# Altium integrated library StudentsLibrary.IntLib: 806 symbols (part 6 of 10)
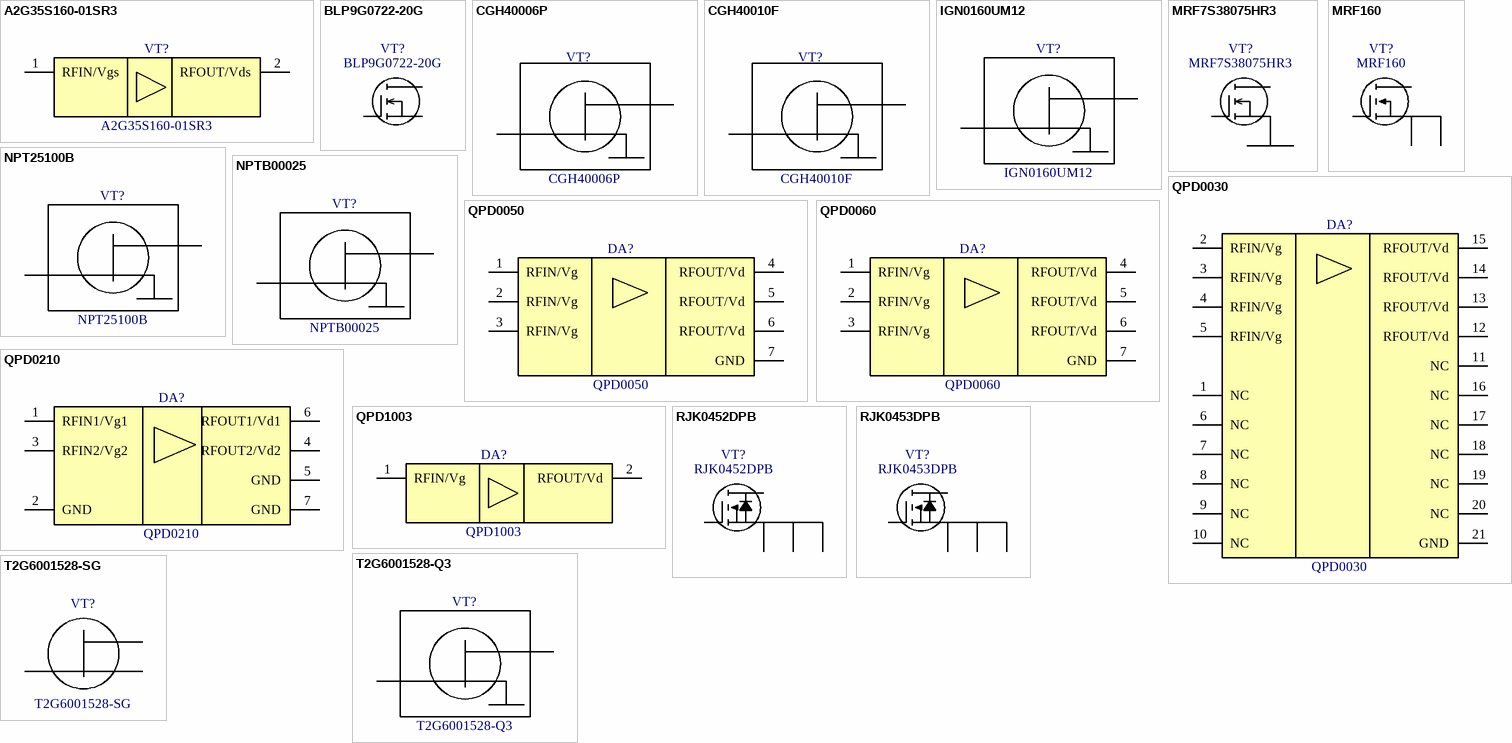
[diagram p52: symbols A2G35S160-01SR3 to T2G6001528-SG]

## MRF160
designator VT?
Broadband Power FET4W, to 500MHz, 28V; Manufacturer: MACOM; PartNumber: MRF160; ComponentLink1Description: Product Page; ComponentLink1URL: https://www.macom.com/products/product-detail/MRF160; ComponentLink2Description: DataSheet; ComponentLink2URL: https://cdn.macom.com/datasheets/MRF160.pdf
footprint MRF160 (MACOM Power FET CASE 249-06)
pins: 1 S, 2 G, 3 S, 4 D

## NPT25100B
designator VT?
GaN Amplifier 28 V, 125 W, 2.1 - 2.7 GHz; Manufacturer: MACOM; PartNumber: NPT25100B; ComponentLink1Description: Product Page; ComponentLink2Description: DataSheet; ComponentLink1URL: https://www.macom.com/products/product-detail/NPT25100B; ComponentLink2URL: https://cdn.macom.com/datasheets/NPT25100.pdf
footprint NPT25100B (MACOM Flange Ceramic)
pins: D, G

## NPTB00025
designator VT?
GaN Power Transistor, 28 V, 25 W DC - 4 GHz; Manufacturer: MACOM; PartNumber: NPTB00025; ComponentLink1Description: Product Page; ComponentLink2Description: DataSheet; ComponentLink1URL: https://www.macom.com/products/product-detail/NPTB00025B; ComponentLink2URL: https://cdn.macom.com/datasheets/NPTB00025.pdf
footprint NPTB00025 (M/A-COM NPTB00025 case AC200B-2)
pins: D, G

## QPD0030
designator DA?
45 W, 48 V, DC – 4 GHz, GaN RF Power Transistor; Manufacturer: Qorvo; PartNumber: QPD0030; ComponentLink1Description: Product Page; ComponentLink1URL: https://www.qorvo.com/products/p/QPD0030; ComponentLink2Description: DataSheet; ComponentLink2URL: https://www.qorvo.com/products/d/da003623
footprint QFN21P50_400X300X90L40X25T260X160N (Quad Flat No-Lead (QFN with Tab), 0.50 mm pitch; rect., 6 pin X 4 pin, 4.00 mm L X 3.00 mm W X 0.90 mm H body)
pins: 1 NC, 2 RFIN/Vg, 3 RFIN/Vg, 4 RFIN/Vg, 5 RFIN/Vg, 6 NC, 7 NC, 8 NC, 9 NC, 10 NC, 11 NC, 12 RFOUT/Vd, 13 RFOUT/Vd, 14 RFOUT/Vd, 15 RFOUT/Vd, 16 NC, 17 NC, 18 NC, 19 NC, 20 NC, 21 GND

## QPD0050
designator DA?
75 W, DC to 3.6 GHz 48V GaN RF Power Transistor; Manufacturer: Qorvo; PartNumber: QPD0050; ComponentLink1Description: Product Page; ComponentLink1URL: https://www.qorvo.com/products/p/QPD0050; ComponentLink2Description: DataSheet; ComponentLink2URL: https://www.qorvo.com/products/d/da003624
footprint SON7P160_660X720X95L110X80T531X360N (Small Outline No-Lead (SON with Tab), 1.60 mm pitch; 6 pin, 6.60 mm L X 7.20 mm W X 0.95 mm H body)
pins: 1 RFIN/Vg, 2 RFIN/Vg, 3 RFIN/Vg, 4 RFOUT/Vd, 5 RFOUT/Vd, 6 RFOUT/Vd, 7 GND

## QPD0060
designator DA?
90 W, DC to 3.6 GHz 48V GaN RF Power Transistor; Manufacturer: Qorvo; PartNumber: QPD0060; ComponentLink1Description: Product Page; ComponentLink1URL: https://www.qorvo.com/products/p/QPD0060; ComponentLink2Description: DataSheet; ComponentLink2URL: https://www.qorvo.com/products/d/da005904
footprint SON7P160_660X720X95L110X80T531X360N (Small Outline No-Lead (SON with Tab), 1.60 mm pitch; 6 pin, 6.60 mm L X 7.20 mm W X 0.95 mm H body)
pins: 1 RFIN/Vg, 2 RFIN/Vg, 3 RFIN/Vg, 4 RFOUT/Vd, 5 RFOUT/Vd, 6 RFOUT/Vd, 7 GND

## QPD0210
designator DA?
2x15 W, 48 V, 1.8 – 2.7 GHz, Dual GaN RF Transistor; Manufacturer: Qorvo; PartNumber: QPD0210; ComponentLink1Description: Product Page; ComponentLink1URL: https://www.qorvo.com/products/p/QPD0210
footprint SON7P160_650X700X95L100X80T531X360N (Small Outline No-Lead (SON with Tab), 1.60 mm pitch; 6 pin, 6.50 mm L X 7.00 mm W X 0.95 mm H body)
pins: 1 RFIN1/Vg1, 2 GND, 3 RFIN2/Vg2, 4 RFOUT2/Vd2, 5 GND, 6 RFOUT1/Vd1, 7 GND

## QPD1003
designator DA?
500W, 50V, 1.2 – 1.4 GHz, GaN RF IMFET; Manufacturer: Qorvo; PartNumber: QPD1003; ComponentLink1Description: Product Page; ComponentLink1URL: https://www.qorvo.com/products/p/QPD1003; ComponentLink2Description: DataSheet; ComponentLink2URL: https://www.qorvo.com/products/d/da003628
footprint QPD1003 (Qorvo Flange RF-565)
pins: 1 RFIN/Vg, 2 RFOUT/Vd

## RJK0452DPB
designator VT?
40V, 45A, 3.5mOhm max.  Silicon N Channel Power MOS FET; Manufacturer: Renesas; PartNumber: RJK0452DPB; ComponentLink1Description: Product Page; ComponentLink1URL: https://www.renesas.com/us/en/products/power-power-management/discrete-power-devices/power-mosfets/rjk0452dpb-nch-single-power-mosfet-40v-45a-35mohm-lfpak; ComponentLink2Description: DataSheet; ComponentLink2URL: https://www.renesas.com/us/en/document/dst/rjk0452dpb-datasheet?r=1342396
footprint DPAK5P127_600X110L62X40T420X420N (DPAK, 1.27 mm pitch; 4 pin, 3.95 mm L X 5.10 mm W X 1.10 mm H body)
pins: 1 S, 2 S, 3 S, 4 G, 5 D

## RJK0453DPB
designator VT?
Silicon N Channel Power MOS FET; Manufacturer: Renesas; PartNumber: RJK0453DPB; ComponentLink1Description: Product Page; ComponentLink1URL: https://www.renesas.com/us/en/products/power-power-management/discrete-power-devices/power-mosfets/rjk0453dpb-nch-single-power-mosfet-40v-55a-23mohm-lfpak; ComponentLink2Description: DataSheet; ComponentLink2URL: https://www.renesas.com/us/en/document/dst/rjk0453dpb-datasheet?r=1342401
footprint DPAK5P127_600X110L62X40T420X420N (DPAK, 1.27 mm pitch; 4 pin, 3.95 mm L X 5.10 mm W X 1.10 mm H body)
pins: 1 S, 2 S, 3 S, 4 G, 5 D

## T2G6001528-Q3
designator VT?
18W, 28V, DC – 6 GHz, GaN RF Power Transistor; Manufacturer: Qorvo; PartNumber: T2G6001528-Q3; ComponentLink1Description: Product Page; ComponentLink2Description: DataSheet; ComponentLink1URL: https://www.qorvo.com/products/p/T2G6001528-Q3; ComponentLink2URL: https://www.qorvo.com/products/d/da003820
footprint T2G6001528-Q3 (Qorvo T2G6001528-Q3)
pins: D, G

## T2G6001528-SG
designator VT?
15W, 28V, DC – 6 GHz, GaN RF Power Transistor; Manufacturer: Qorvo; PartNumber: T2G6001528-SG; ComponentLink1Description: Product Page; ComponentLink1URL: https://www.qorvo.com/products/p/T2G6001528-SG; ComponentLink2Description: DataSheet; ComponentLink2URL: https://www.qorvo.com/products/d/da003827
footprint T2G6001528-SG (Qorvo T2G6001528-SG)
pins: D, G, S


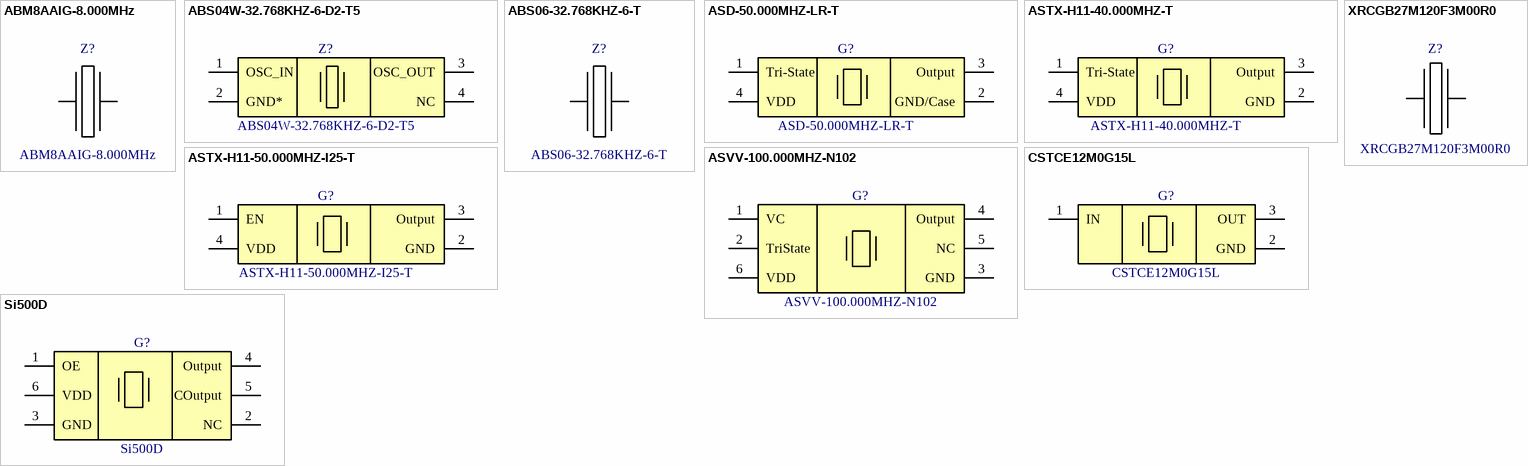
[diagram p22: symbols ABM8AAIG-8.000MHz to XRCGB27M120F3M00R0]

## ABM8AAIG-8.000MHz
designator Z?
Crystal 8Mhz 8Pf; Manufacturer: Abracon; PartNumber: ABM8AAIG-8.000MHz; ComponentLink1Description: Product Page; ComponentLink1URL: https://abracon.com/parametric/crystals/ABM8AAIG-8.000MHz; ComponentLink2Description: DataSheet; ComponentLink2URL: https://abracon.com/datasheets/ABM8AAIG.pdf
footprint ABRACON ABM8AAIG (Abracon ABM8AAIG Oscillator Chip 3.20 x 2.50 x 0.90 mm)
pins: 1, 2

## ABS04W-32.768KHZ-6-D2-T5
designator Z?
Crystal 0.032768MHz ±20ppm (Tol) -200ppm/1ppm (Stability) 6pF FUND 130000Ohm 4-Pin SMD T/R; Manufacturer: Abracon; PartNumber: ABS04W-32.768KHZ-6-D2-T5; ComponentLink1Description: Product Page; ComponentLink1URL: https://abracon.com/parametric/crystals/ABS04W-32.768KHZ-6-D2-T5; ComponentLink2Description: DataSheet; ComponentLink2URL: https://abracon.com/datasheets/ABS04W.pdf
footprint ABRACON ABS04W (Abracon ABS04W Oscillator Chip 1.20 x 1.00 x 0.35 mm)
pins: 1 OSC_IN, 2 GND*, 3 OSC_OUT, 4 NC

## ABS06-32.768KHZ-6-T
designator Z?
Crystal 32.7680Khz 6Pf Smd/Tape & Reel (Tr) Rohs Compliant: Yes |Abracon ABS06-32.768KHZ-6-T; PartNumber: ABS06-32.768KHZ-6-T; Manufacturer: Abracon; ComponentLink1Description: Product Page; ComponentLink1URL: https://abracon.com/parametric/crystals/ABS06-32.768KHZ-6-T; ComponentLink2Description: DataSheet; ComponentLink2URL: https://abracon.com/Resonators/ABS06.pdf
footprint ABRACON ABS06 (Abracon ABS06 Oscillator Chip 2.00 x 1.20 x 0.60 mm)
pins: 1, 2

## ASD-50.000MHZ-LR-T
designator G?
Crystal Oscillator 50MHz 1.8V 15pF 4-Pin SMD T/R; Manufacturer: Abracon; PartNumber: ASD-50.000MHZ-LR-T; ComponentLink1Description: Product Page; ComponentLink1URL: https://abracon.com/parametric/oscillators/ASD-50.000MHZ-LC-T; ComponentLink2Description: DataSheet; ComponentLink2URL: https://abracon.com/Oscillators/ASDseries.pdf
footprint ABRACON ASD (Abracon ASD Oscillator Chip 2.00 x 2.50 x 1.00 mm)
pins: 1 Tri-State, 2 GND/Case, 3 Output, 4 VDD

## ASTX-H11-40.000MHZ-T
designator G?
Crystal Oscillator 40MHz 3.3V 6ppm 4-Pin SMD; Manufacturer: Abracon; PartNumber: ASTX-H11-40.000MHZ-T; ComponentLink1Description: Product Page; ComponentLink1URL: https://abracon.com/parametric/oscillators/ASTX-H11-40.000MHZ-T; ComponentLink2Description: DataSheet; ComponentLink2URL: https://abracon.com/Oscillators/ASTX-H11.pdf
footprint OSCCC320X250X110L75X100N (Oscillator, Corner Concave; 3.20 mm L X 2.50 mm W X 1.10 mm H body)
pins: 1 Tri-State, 2 GND, 3 Output, 4 VDD

## ASTX-H11-50.000MHZ-I25-T
designator G?
Crystal Oscillator 40MHz 3.3V 6ppm 4-Pin SMD; Manufacturer: Abracon; PartNumber: ASTX-H11-50.000MHZ-I25-T; ComponentLink1Description: Product Page; ComponentLink1URL: https://abracon.com/parametric/oscillators/ASTX-H11-50.000MHZ-I25-T; ComponentLink2Description: DataSheet; ComponentLink2URL: https://abracon.com/Oscillators/ASTX-H11.pdf
footprint OSCCC320X250X110L75X100N (Oscillator, Corner Concave; 3.20 mm L X 2.50 mm W X 1.10 mm H body)
pins: 1 EN, 2 GND, 3 Output, 4 VDD

## ASVV-100.000MHZ-N102
designator G?
CMOS/TTL COMPATIBLE VOLTAGE CONTROLLED CRYSTAL OSCILLATOR; Manufacturer: Abracon; OscFreq: 100 MHz; OscFreqStability: ±50 ppm; OscOutput: CMOS; OscTemp: 0 to 70 °C; PartNumber: ASVV-100.000MHZ-N102; ComponentLink1Description: Product Page; ComponentLink1URL: https://abracon.com/parametric/oscillators/ASVV-100.000MHZ-N102; ComponentLink2Description: DataSheet; ComponentLink2URL: https://abracon.com/Oscillators/ASVV.pdf
footprint ABRACON ASVV (Abracon ASVV Oscillator Chip 7.0 x 5.0 x 2.0 mm)
pins: 1 VC, 2 TriState, 3 GND, 4 Output, 5 NC, 6 VDD

## CSTCE12M0G15L
designator G?
12MHz Piezoelectric Ceramic Resonator; Manufacturer: Murata; PartNumber: CSTCE12M0G15L; ComponentLink1Description: Product Page; ComponentLink1URL: https://www.murata.com/en-global/products/productdetail?cate=cgsubResonators&partno=CSTNE12M0G55Z000R0
footprint Murata 3-T_320X130X70 (Murata 3-Terminal 3.2X1.3X0.7)
pins: 1 IN, 2 GND, 3 OUT

## Si500D
designator G?
Si500D series Differential output silicon oscillator; Manufacturer: Silicon Labs; PartNumber: Si500D
footprint Si500D (Si500D 3.2 x 5.0 mm XOs)
pins: 1 OE, 2 NC, 3 GND, 4 Output, 5 COutput, 6 VDD

## XRCGB27M120F3M00R0
designator Z?
Resonator Frequency: 27.1200MHz / Size: 2.0 x 1.6mm; Manufacturer: Murata; PartNumber: XRCGB27M120F3M00R0; ComponentLink1Description: Product Page; ComponentLink1URL: https://www.murata.com/en-eu/products/productdetail?partno=XRCGB27M120F3M00R0; ComponentLink2Description: DataSheet; ComponentLink2URL: https://www.murata.com/products/productdata/8801078116382/SPEC-XRCGB27M120F3M00R0.pdf?1541043011000
footprint MURATA HCR2016 (Size: 2.0 x 1.6mm)
pins: 1, 3


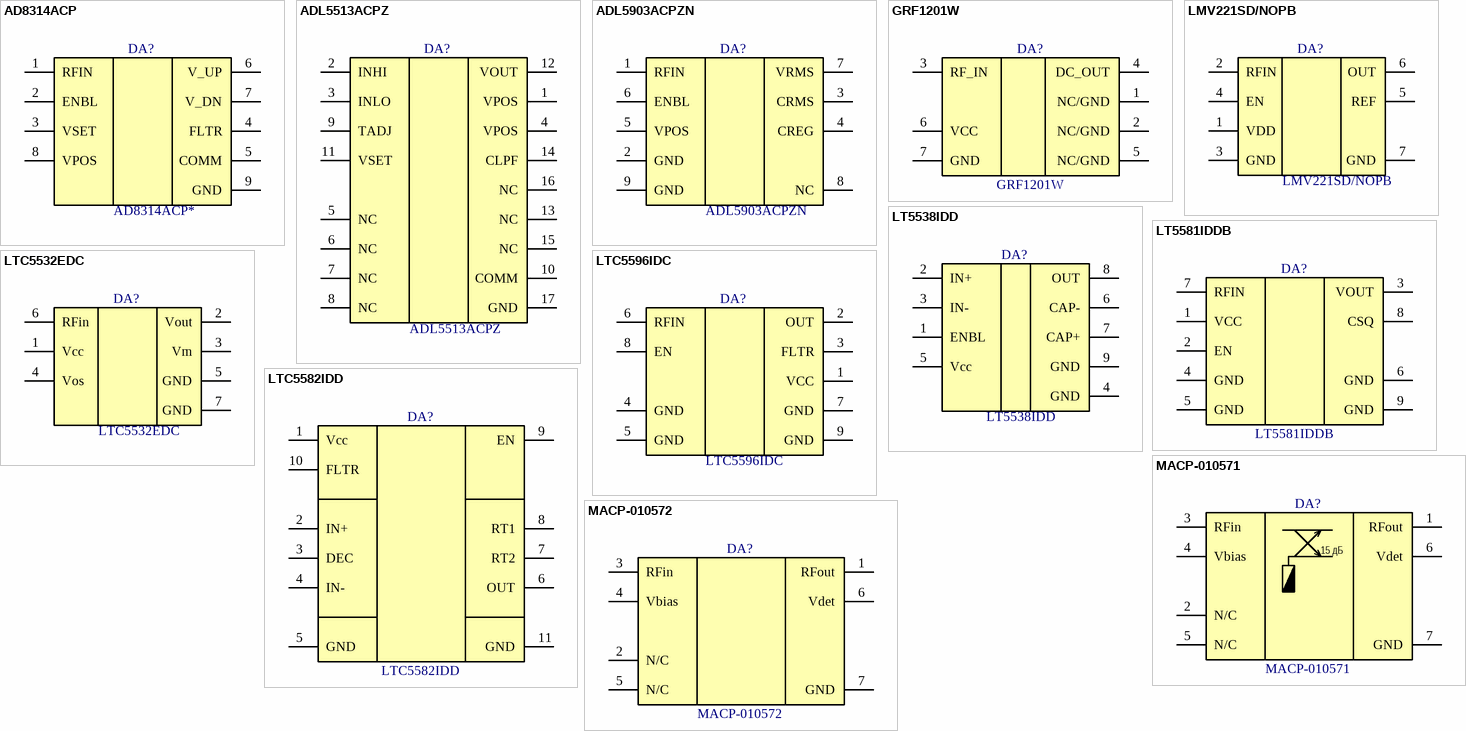
[diagram p23: symbols AD8314ACP to MACP-010572]

## AD8314ACP
designator DA?, comment AD8314ACP*
100 MHz to 2.7 GHz, 45 dB  RF Detector/Controller; Manufacturer: Analog Devices; PartNumber: AD8314ACP*; ComponentLink1Description: Product Page; ComponentLink1URL: https://www.analog.com/en/products/ad8314.html; ComponentLink2Description: DataSheet; ComponentLink2URL: https://www.analog.com/media/en/technical-documentation/data-sheets/ad8314.pdf
footprint SON9P50_300X200X80L42X24T174X45N (Small Outline No-Lead (SON with Tab), 0.50 mm pitch; 8 pin, 3.00 mm L X 2.00 mm W X 0.80 mm H body)
pins: 1 RFIN, 2 ENBL, 3 VSET, 4 FLTR, 5 COMM, 6 V_UP, 7 V_DN, 8 VPOS, 9 GND

## ADL5513ACPZ
designator DA?
1 MHz to 4 GHz, 80 dB Logarithmic Detector/Controller; Manufacturer: Analog Devices; PartNumber: ADL5513ACPZ; ComponentLink1Description: Product Page; ComponentLink1URL: https://www.analog.com/en/products/adl5513.html; ComponentLink2Description: DataSheet; ComponentLink2URL: https://www.analog.com/media/en/technical-documentation/data-sheets/ADL5513.pdf
footprint QFN17P50_300X300X80L40X24T160N (Quad Flat No-Lead (QFN with Tab), 0.50 mm pitch; square, 4 pin X 4 pin, 3.00 mm L X 3.00 mm W X 0.80 mm H body)
pins: 1 VPOS, 2 INHI, 3 INLO, 4 VPOS, 5 NC, 6 NC, 7 NC, 8 NC, 9 TADJ, 10 COMM, 11 VSET, 12 VOUT, 13 NC, 14 CLPF, 15 NC, 16 NC, 17 GND

## ADL5903ACPZN
designator DA?
200 MHz to 6 GHz 35 dB TruPwr™ Detector; Manufacturer: Analog Devices; PartNumber: ADL5903ACPZN; ComponentLink1Description: Product Page; ComponentLink1URL: https://www.analog.com/en/products/adl5903.html; ComponentLink2Description: DataSheet; ComponentLink2URL: https://www.analog.com/media/en/technical-documentation/data-sheets/ADL5903.pdf
footprint SON9P50_200X200X60L35X25T160X100N (Small Outline No-Lead (SON with Tab), 0.50 mm pitch; 8 pin, 2.00 mm L X 2.00 mm W X 0.60 mm H body)
pins: 1 RFIN, 2 GND, 3 CRMS, 4 CREG, 5 VPOS, 6 ENBL, 7 VRMS, 8 NC, 9 GND

## GRF1201W
designator DA?
Log Average Power Detector 0.1 to 6.0 GHz; Manufacturer: Guerilla-RF; PartNumber: GRF1201W; ComponentLink1Description: Product Page; ComponentLink1URL: https://www.guerrilla-rf.com/products/detail/sku/GRF1201-W; ComponentLink2Description: DataSheet; ComponentLink2URL: https://www.guerrilla-rf.com/products/DataSheet?sku=1201-W&file_name=GRF1201WDS.pdf
footprint SON7P50_150X150X50L20X20T110X60N (Small Outline No-Lead (SON with Tab), 0.50 mm pitch; 6 pin, 1.50 mm L X 1.50 mm W X 0.50 mm H body)
pins: 1 NC/GND, 2 NC/GND, 3 RF_IN, 4 DC_OUT, 5 NC/GND, 6 VCC, 7 GND

## LMV221SD/NOPB
designator DA?
50 MHz to 3.5 GHz 40 dB Logarithmic Power Detector for CDMA and WCDMA; Manufacturer: Texas Instruments; PartNumber: LMV221SD/NOPB; ComponentLink1Description: Product Page; ComponentLink1URL: https://www.ti.com/product/LMV221; ComponentLink2Description: DataSheet; ComponentLink2URL: https://www.ti.com/lit/gpn/lmv221
footprint SON127P600-8N_NGF0006A
pins: 1 VDD, 2 RFIN, 3 GND, 4 EN, 5 REF, 6 OUT, 7 GND

## LT5538IDD
designator DA?
40MHz to 3.8GHz RF Power Detector with 75dB Dynamic Range; Manufacturer: Analog Devices; PartNumber: LT5538IDD; ComponentLink1Description: Product Page; ComponentLink1URL: https://www.analog.com/en/products/lt5538.html; ComponentLink2Description: DataSheet; ComponentLink2URL: https://www.analog.com/media/en/technical-documentation/data-sheets/5538f.pdf
footprint SON9P50_300X300X80L38X25T238X165N (Small Outline No-Lead (SON with Tab), 0.50 mm pitch; 8 pin, 3.00 mm L X 3.00 mm W X 0.80 mm H body)
pins: 1 ENBL, 2 IN+, 3 IN-, 4 GND, 5 Vcc, 6 CAP-, 7 CAP+, 8 OUT, 9 GND

## LT5581IDDB
designator DA?
6GHz RMS Power Detector with 40dB Dynamic Range; Manufacturer: Analog Devices; PartNumber: LT5581IDDB; ComponentLink1Description: Product Page; ComponentLink1URL: https://www.analog.com/en/products/lt5581.html; ComponentLink2Description: DataSheet; ComponentLink2URL: https://www.analog.com/media/en/technical-documentation/data-sheets/5581fb.pdf
footprint LT5581 (DDB Package / 8-Lead Plastic DFN (3mm × 2mm) / (Reference LTC DWG # 05-08-1702 Rev B))
pins: 1 VCC, 2 EN, 3 VOUT, 4 GND, 5 GND, 6 GND, 7 RFIN, 8 CSQ, 9 GND

## LTC5532EDC
designator DA?
Precision 300MHz to 7GHz RF Detector with Gain and Offset Adjustment; Manufacturer: Analog Devices; PartNumber: LTC5532EDC; ComponentLink1Description: Product Page; ComponentLink1URL: https://www.analog.com/en/products/ltc5532.html; ComponentLink2Description: DataSheet; ComponentLink2URL: https://www.analog.com/media/en/technical-documentation/data-sheets/5532f.pdf
footprint SON7P50_200X200X80L38X25T137X56N (Small Outline No-Lead (SON with Tab), 0.50 mm pitch; 6 pin, 2.00 mm L X 2.00 mm W X 0.80 mm H body)
pins: 1 Vcc, 2 Vout, 3 Vm, 4 Vos, 5 GND, 6 RFin, 7 GND

## LTC5582IDD
designator DA?
RMS Power Detector, 40MHz to 10GHz; Manufacturer: Analog Devices; ComponentLink1Description: Product Page; ComponentLink1URL: https://www.analog.com/en/products/ltc5582.html; PartNumber: LTC5582IDD; ComponentLink2Description: DataSheet; ComponentLink2URL: https://www.analog.com/media/en/technical-documentation/data-sheets/LTC5582.pdf
footprint DFN-10
pins: 1 Vcc, 2 IN+, 3 DEC, 4 IN-, 5 GND, 6 OUT, 7 RT2, 8 RT1, 9 EN, 10 FLTR, 11 GND

## LTC5596IDC
designator DA?
100MHz to 40GHz Linear-in-dB RMS Power Detector with 35dB Dynamic Range; Manufacturer: Analog Devices; PartNumber: LTC5596IDC; ComponentLink1Description: Product Page; ComponentLink1URL: https://www.analog.com/en/products/ltc5596.html; ComponentLink2Description: DataSheet; ComponentLink2URL: https://www.analog.com/media/en/technical-documentation/data-sheets/5596f.pdf
footprint SON50P200X80_HS-9N (SON, 8-Leads, Body 2.00x2.00mm, Pitch 0.50mm, Thermal Pad 1.55x0.20mm, IPC Medium Density)
pins: 1 VCC, 2 OUT, 3 FLTR, 4 GND, 5 GND, 6 RFIN, 7 GND, 8 EN, 9 GND

## MACP-010571
designator DA?
Directional Power Detector / 2 - 6 GHz; Manufacturer: MACOM; PartNumber: MACP-010571; ComponentLink1Description: Product Page; ComponentLink1URL: https://www.macom.com/products/product-detail/MACP-010571; ComponentLink2Description: DataSheet; ComponentLink2URL: https://cdn.macom.com/datasheets/MACP-010571.pdf
footprint SON40P150X80_HS-7N (SON, 6-Leads, Body 1.20x1.50mm, Pitch 0.40mm, Thermal Pad 0.85x0.40mm, IPC Medium Density)
pins: 1 RFout, 2 N/C, 3 RFin, 4 Vbias, 5 N/C, 6 Vdet, 7 GND
text: 15 дБ

## MACP-010572
designator DA?
Directional Power Detector / 6 - 18 GHz; Manufacturer: MACOM; PartNumber: MACP-010572; ComponentLink1Description: Product Page; ComponentLink1URL: https://www.macom.com/products/product-detail/MACP-010572; ComponentLink2Description: DataSheet; ComponentLink2URL: https://cdn.macom.com/datasheets/MACP-010572.pdf
footprint MACP-010572
pins: 1 RFout, 2 N/C, 3 RFin, 4 Vbias, 5 N/C, 6 Vdet, 7 GND


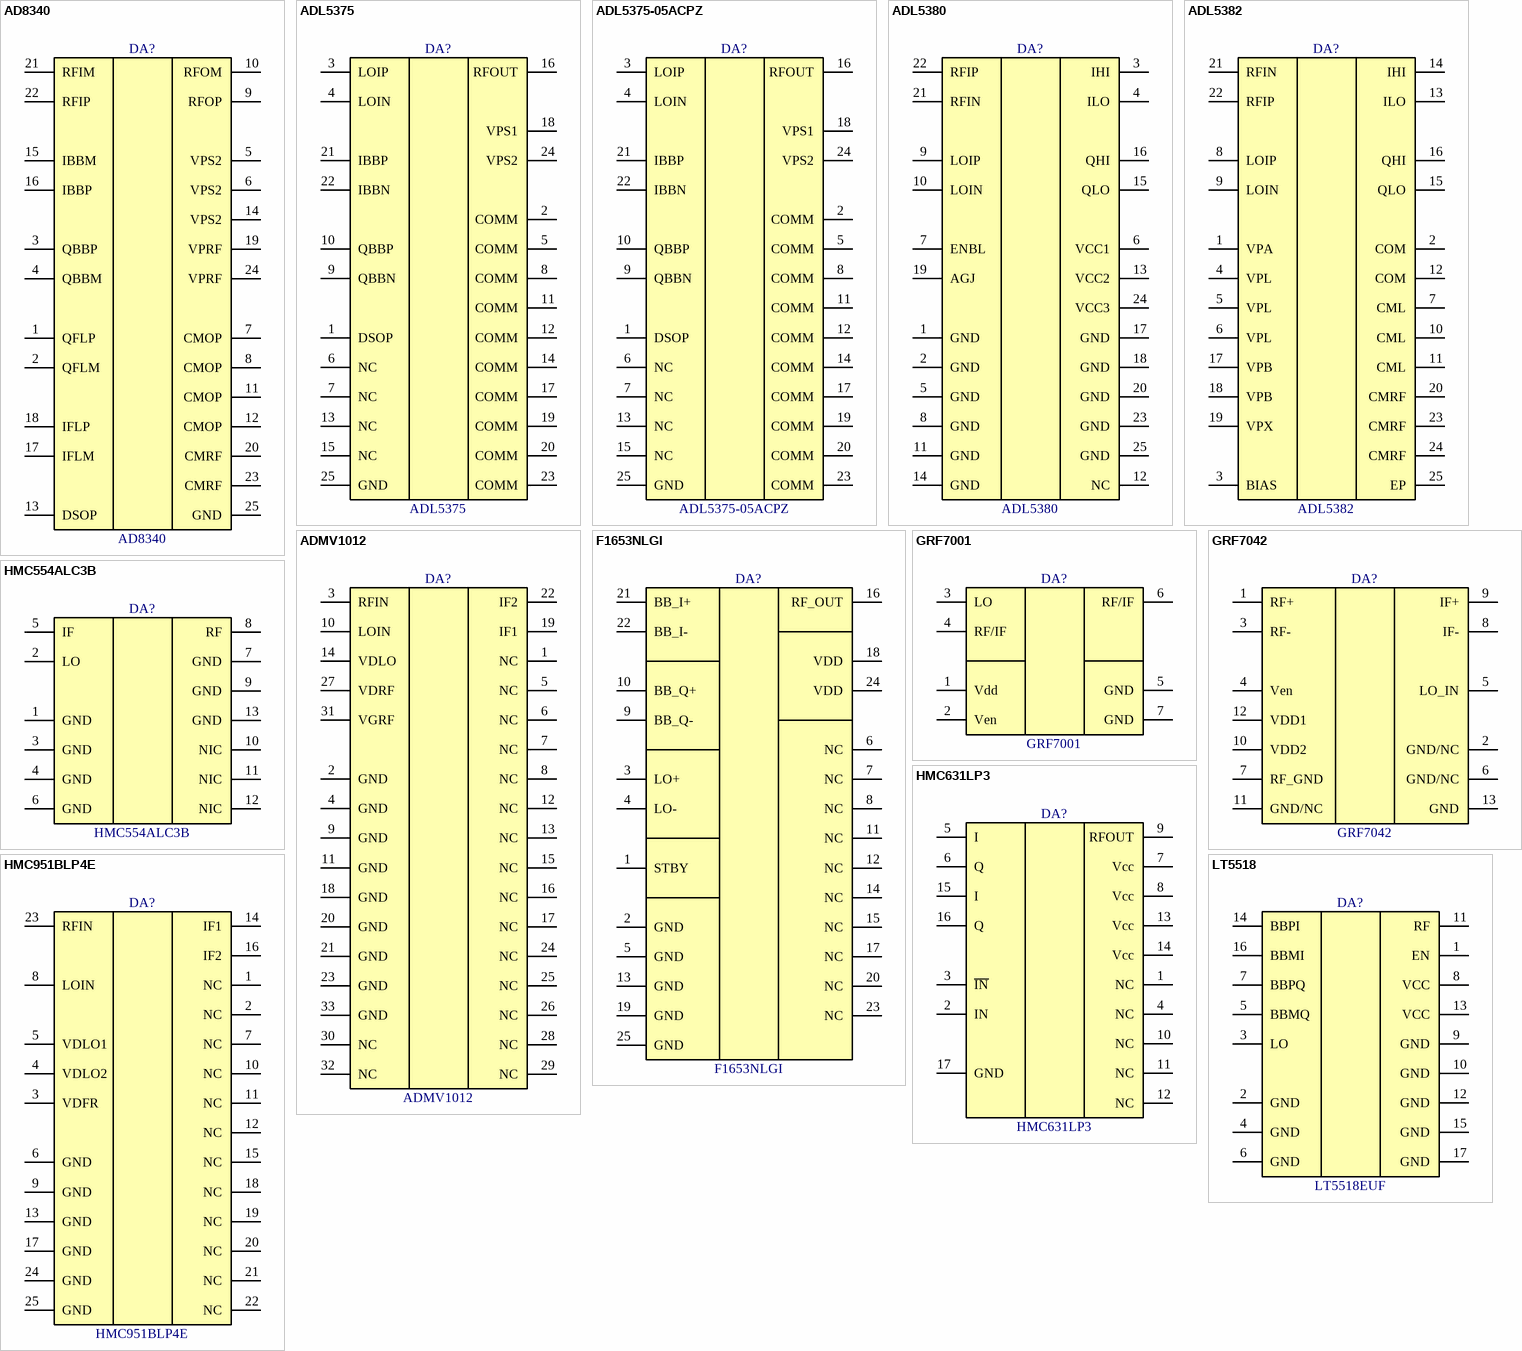
[diagram p24: symbols AD8340 to LT5518]

## AD8340
designator DA?
00 MHz to 1000 MHz RF Vector Modulator; Manufacturer: Analog Devices; PartNumber: AD8340; ComponentLink1Description: Product Page; ComponentLink1URL: https://www.analog.com/en/products/ad8340.html; ComponentLink2Description: DataSheet; ComponentLink2URL: https://www.analog.com/media/en/technical-documentation/data-sheets/AD8340.pdf
footprint QFN50P400X400X80_HS-25N (QFN, 24-Leads, Body 4.00x4.00mm, Pitch 0.50mm, Thermal Pad 2.05x2.05mm, IPC Medium Density)
pins: 1 QFLP, 2 QFLM, 3 QBBP, 4 QBBM, 5 VPS2, 6 VPS2, 7 CMOP, 8 CMOP, 9 RFOP, 10 RFOM, 11 CMOP, 12 CMOP, 13 DSOP, 14 VPS2, 15 IBBM, 16 IBBP, 17 IFLM, 18 IFLP, 19 VPRF, 20 CMRF, 21 RFIM, 22 RFIP, 23 CMRF, 24 VPRF, 25 GND

## ADL5375
designator DA?
00 MHz to 6 GHz Broadband Quadrature Modulator; Manufacturer: Analog Devices; PartNumber: ADL5375; ComponentLink1Description: Product Page; ComponentLink1URL: https://www.analog.com/en/products/adl5375.html; ComponentLink2Description: DataSheet; ComponentLink2URL: https://www.analog.com/media/en/technical-documentation/data-sheets/ADL5375.pdf
footprint QFN25P50_400X400X80L40X24T250N (Quad Flat No-Lead (QFN with Tab), 0.50 mm pitch; square, 6 pin X 6 pin, 4.00 mm L X 4.00 mm W X 0.80 mm H body)
pins: 1 DSOP, 2 COMM, 3 LOIP, 4 LOIN, 5 COMM, 6 NC, 7 NC, 8 COMM, 9 QBBN, 10 QBBP, 11 COMM, 12 COMM, 13 NC, 14 COMM, 15 NC, 16 RFOUT, 17 COMM, 18 VPS1, 19 COMM, 20 COMM, 21 IBBP, 22 IBBN, 23 COMM, 24 VPS2, 25 GND

## ADL5375-05ACPZ
designator DA?
00 MHz to 6 GHz Broadband Quadrature Modulator, 500mA Bias; Manufacturer: Analog Devices; PartNumber: ADL5375-05ACPZ; ComponentLink1Description: Product Page; ComponentLink1URL: https://www.analog.com/en/products/adl5375.html; ComponentLink2Description: DataSheet; ComponentLink2URL: https://www.analog.com/media/en/technical-documentation/data-sheets/ADL5375.pdf
footprint QFN25P50_400X400X80L40X24T250N (Quad Flat No-Lead (QFN with Tab), 0.50 mm pitch; square, 6 pin X 6 pin, 4.00 mm L X 4.00 mm W X 0.80 mm H body)
pins: 1 DSOP, 2 COMM, 3 LOIP, 4 LOIN, 5 COMM, 6 NC, 7 NC, 8 COMM, 9 QBBN, 10 QBBP, 11 COMM, 12 COMM, 13 NC, 14 COMM, 15 NC, 16 RFOUT, 17 COMM, 18 VPS1, 19 COMM, 20 COMM, 21 IBBP, 22 IBBN, 23 COMM, 24 VPS2, 25 GND

## ADL5380
designator DA?
400 MHz to 6 GHz Quadrature Demodulator; Manufacturer: Analog Devices; PartNumber: ADL5380; ComponentLink1Description: Product Page; ComponentLink1URL: https://www.analog.com/en/products/adl5380.html; ComponentLink2Description: DataSheet; ComponentLink2URL: https://www.analog.com/media/en/technical-documentation/data-sheets/ADL5380.pdf
footprint QFN25P50_400X400X80L40X24T255N (Quad Flat No-Lead (QFN with Tab), 0.50 mm pitch; square, 6 pin X 6 pin, 4.00 mm L X 4.00 mm W X 0.80 mm H body)
pins: 1 GND, 2 GND, 3 IHI, 4 ILO, 5 GND, 6 VCC1, 7 ENBL, 8 GND, 9 LOIP, 10 LOIN, 11 GND, 12 NC, 13 VCC2, 14 GND, 15 QLO, 16 QHI, 17 GND, 18 GND, 19 AGJ, 20 GND, 21 RFIN, 22 RFIP, 23 GND, 24 VCC3, 25 GND

## ADL5382
designator DA?
700 MHz to 2.7 GHz Quadrature Demodulator; Manufacturer: Analog Devices; PartNumber: ADL5382; ComponentLink1Description: Product Page; ComponentLink1URL: https://www.analog.com/en/products/adl5382.html; ComponentLink2Description: DataSheet; ComponentLink2URL: https://www.analog.com/media/en/technical-documentation/data-sheets/ADL5382.pdf
footprint ADL5382 (AD 24-Lead Lead Frame Chip Scale Package  [LFCSP_VQ] 4 mm ? 4 mm Body, Very Thin Quad  (CP-24-2))
pins: 1 VPA, 2 COM, 3 BIAS, 4 VPL, 5 VPL, 6 VPL, 7 CML, 8 LOIP, 9 LOIN, 10 CML, 11 CML, 12 COM, 13 ILO, 14 IHI, 15 QLO, 16 QHI, 17 VPB, 18 VPB, 19 VPX, 20 CMRF, 21 RFIN, 22 RFIP, 23 CMRF, 24 CMRF, 25 EP

## ADMV1012
designator DA?
17.5 GHz to 24 GHz, GaAs, MMIC, I/Q Downconverter; Manufacturer: Analog Devices; PartNumber: ADMV1012; ComponentLink1Description: Product Page; ComponentLink1URL: https://www.analog.com/en/products/admv1012.html; ComponentLink2Description: DataSheet; ComponentLink2URL: https://www.analog.com/media/en/technical-documentation/data-sheets/admv1012.pdf
footprint PQFN33P50_490X490X110L32X30T350N (Pullback Quad Flat No-Lead (PQFN with Tab), 0.50 mm pitch; square, 8 pin X 8 pin, 4.90 mm L X 4.90 mm W X 1.10 mm H body)
pins: 1 NC, 2 GND, 3 RFIN, 4 GND, 5 NC, 6 NC, 7 NC, 8 NC, 9 GND, 10 LOIN, 11 GND, 12 NC, 13 NC, 14 VDLO, 15 NC, 16 NC, 17 NC, 18 GND, 19 IF1, 20 GND, 21 GND, 22 IF2, 23 GND, 24 NC, 25 NC, 26 NC, 27 VDRF, 28 NC, 29 NC, 30 NC, 31 VGRF, 32 NC, 33 GND

## F1653NLGI
designator DA?
Broadband ZIF/CIF I/Q Modulator for High Order LTE MIMO Systems; Manufacturer: Renesas; PartNumber: F1653NLGI; ComponentLink1Description: Product Page; ComponentLink1URL: https://www.renesas.com/us/en/products/rf-products/modulators-demodulators/f1653-broadband-zifcif-iq-modulator-high-order-lte-mimo-systems; ComponentLink2Description: DataSheet; ComponentLink2URL: https://www.renesas.com/us/en/document/dst/f1653-datasheet-revo?r=162266
footprint QFN25P50_400X400X100L40X24T245N (Quad Flat No-Lead (QFN with Tab), 0.50 mm pitch; square, 6 pin X 6 pin, 4.00 mm L X 4.00 mm W X 1.00 mm H body)
pins: 1 STBY, 2 GND, 3 LO+, 4 LO-, 5 GND, 6 NC, 7 NC, 8 NC, 9 BB_Q-, 10 BB_Q+, 11 NC, 12 NC, 13 GND, 14 NC, 15 NC, 16 RF_OUT, 17 NC, 18 VDD, 19 GND, 20 NC, 21 BB_I+, 22 BB_I-, 23 NC, 24 VDD, 25 GND

## GRF7001
designator DA?
High Linearity Mixer with / Integrated LO Buffer; Manufacturer: Guerilla RF; PartNumber: GRF7001; ComponentLink1Description: Product Page; ComponentLink1URL: https://www.guerrilla-rf.com/products/detail/sku/GRF7001; ComponentLink2Description: DataSheet; ComponentLink2URL: https://www.guerrilla-rf.com/products/DataSheet?sku=7001&file_name=GRF7001DS.pdf
footprint GRF7001
pins: 1 Vdd, 2 Ven, 3 LO, 4 RF/IF, 5 GND, 6 RF/IF, 7 GND

## GRF7042
designator DA?
Double-Balanced Mixer with Integrated LO Buffer; Manufacturer: Guerilla RF; PartNumber: GRF7042; ComponentLink1Description: Product Page; ComponentLink1URL: https://www.guerrilla-rf.com/products/detail/sku/GRF7042; ComponentLink2Description: DataSheet; ComponentLink2URL: https://www.guerrilla-rf.com/products/DataSheet?sku=7042&file_name=GRF7042DS.pdf
footprint GRF7042 (Quad Flat No-Lead (QFN with Tab), 0.50 mm pitch; square, 3 pin X 3 pin, 2.00 mm L X 2.00 mm W X 0.50 mm H body)
pins: 1 RF+, 2 GND/NC, 3 RF-, 4 Ven, 5 LO_IN, 6 GND/NC, 7 RF_GND, 8 IF-, 9 IF+, 10 VDD2, 11 GND/NC, 12 VDD1, 13 GND

## HMC554ALC3B
designator DA?
10 GHz to 20 GHz, GaAs, MMIC, Double Balanced Mixer; Manufacturer: Analog Devices; PartNumber: HMC554ALC3B; ComponentLink1Description: Product Page; ComponentLink1URL: https://www.analog.com/en/products/hmc554alc3b.html; ComponentLink2Description: DataSheet; ComponentLink2URL: https://www.analog.com/media/en/technical-documentation/data-sheets/hmc554a.pdf
footprint PQFN13P50_290X290X90L32X30T150N (Pullback Quad Flat No-Lead (PQFN with Tab), 0.50 mm pitch; square, 3 pin X 3 pin, 2.90 mm L X 2.90 mm W X 0.90 mm H body)
pins: 1 GND, 2 LO, 3 GND, 4 GND, 5 IF, 6 GND, 7 GND, 8 RF, 9 GND, 10 NIC, 11 NIC, 12 NIC, 13 GND

## HMC631LP3
designator DA?
GaAs HBT VECTOR MODULATOR 1.8 - 2.7 GHz; Manufacturer: Analog Devices; PartNumber: HMC631LP3; ComponentLink1Description: Product Page; ComponentLink1URL: https://www.analog.com/en/products/hmc631.html; ComponentLink2Description: DataSheet; ComponentLink2URL: https://www.analog.com/media/en/technical-documentation/data-sheets/hmc631.pdf
footprint QFN17P50_300X300X100L40X24T173N (Quad Flat No-Lead (QFN with Tab), 0.50 mm pitch; square, 4 pin X 4 pin, 3.00 mm L X 3.00 mm W X 1.00 mm H body)
pins: 1 NC, 2 IN, 3 ~{IN}, 4 NC, 5 I, 6 Q, 7 Vcc, 8 Vcc, 9 RFOUT, 10 NC, 11 NC, 12 NC, 13 Vcc, 14 Vcc, 15 I, 16 Q, 17 GND

## HMC951BLP4E
designator DA?
GaAs MMIC I/Q Downconverter 5.6 - 8.6 GHz; Manufacturer: Analog Devices; PartNumber: HMC951BLP4E; ComponentLink1Description: Product Page; ComponentLink1URL: https://www.analog.com/en/products/hmc951b.html; ComponentLink2Description: DataSheet; ComponentLink2URL: https://www.analog.com/media/en/technical-documentation/data-sheets/HMC951B.pdf
footprint QFN25P50_400X400X100L40X24T280N (Quad Flat No-Lead (QFN with Tab), 0.50 mm pitch; square, 6 pin X 6 pin, 4.00 mm L X 4.00 mm W X 1.00 mm H body)
pins: 1 NC, 2 NC, 3 VDFR, 4 VDLO2, 5 VDLO1, 6 GND, 7 NC, 8 LOIN, 9 GND, 10 NC, 11 NC, 12 NC, 13 GND, 14 IF1, 15 NC, 16 IF2, 17 GND, 18 NC, 19 NC, 20 NC, 21 NC, 22 NC, 23 RFIN, 24 GND, 25 GND

## LT5518
designator DA?, comment LT5518EUF
1.5GHz–2.4GHz High Linearity Direct Quadrature Modulator; Manufacturer: Analog Devices; PartNumber: LT5518EUF; ComponentLink1Description: Product Page; ComponentLink1URL: https://www.analog.com/en/products/lt5518.html; ComponentLink2Description: DataSheet; ComponentLink2URL: https://www.analog.com/media/en/technical-documentation/data-sheets/5518f.pdf
footprint QFN17P65_400X400X80L55X30T215N (Quad Flat No-Lead (QFN with Tab), 0.65 mm pitch; square, 4 pin X 4 pin, 4.00 mm L X 4.00 mm W X 0.80 mm H body)
pins: 1 EN, 2 GND, 3 LO, 4 GND, 5 BBMQ, 6 GND, 7 BBPQ, 8 VCC, 9 GND, 10 GND, 11 RF, 12 GND, 13 VCC, 14 BBPI, 15 GND, 16 BBMI, 17 GND

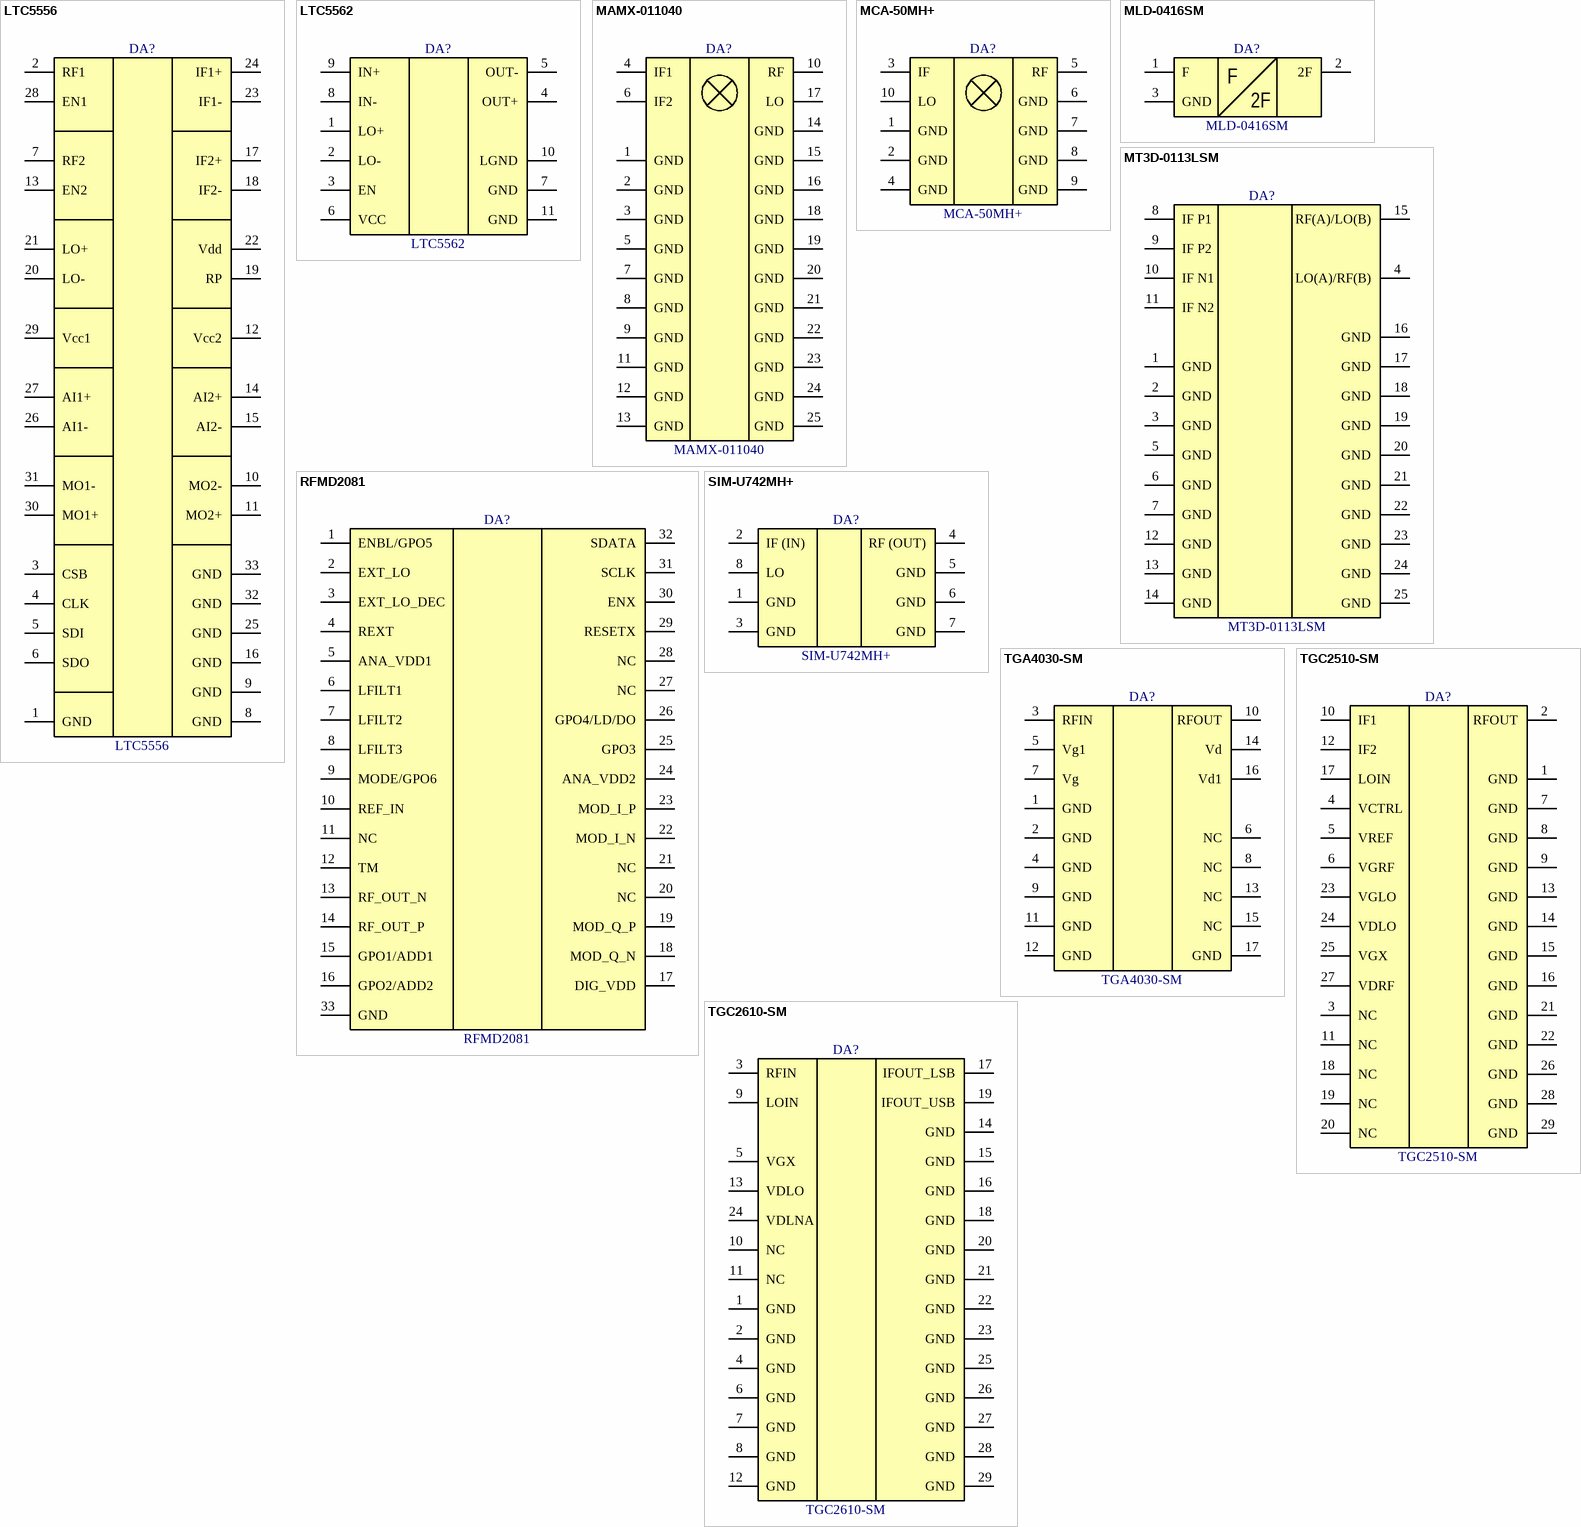
[diagram p25: symbols LTC5556 to TGC2610-SM]

## LTC5556
designator DA?
1.5GHz to 7GHz Dual / Programmable Gain / Downconverting Mixer; Manufacturer: Analog Devices; PartNumber: LTC5556; ComponentLink1Description: Product Page; ComponentLink1URL: https://www.analog.com/en/products/ltc5556.html; ComponentLink2Description: DataSheet; ComponentLink2URL: https://www.analog.com/media/en/technical-documentation/data-sheets/ltc5556.pdf
footprint LTC5556
pins: 1 GND, 2 RF1, 3 CSB, 4 CLK, 5 SDI, 6 SDO, 7 RF2, 8 GND, 9 GND, 10 MO2-, 11 MO2+, 12 Vcc2, 13 EN2, 14 AI2+, 15 AI2-, 16 GND, 17 IF2+, 18 IF2-, 19 RP, 20 LO-, 21 LO+, 22 Vdd, 23 IF1-, 24 IF1+, 25 GND, 26 AI1-, 27 AI1+, 28 EN1, 29 Vcc1, 30 MO1+, 31 MO1-, 32 GND, 33 GND

## LTC5562
designator DA?
Wideband Low Power Active Mixer LF–7GHz; Manufacturer: Analog Devices; PartNumber: LTC5562; ComponentLink1Description: Product Page; ComponentLink1URL: https://www.analog.com/en/products/ltc5562.html; ComponentLink2Description: DataSheet; ComponentLink2URL: https://www.analog.com/media/en/technical-documentation/data-sheets/5562f.pdf
footprint QFN11P50_200X200X80L40X25T50X30N (Quad Flat No-Lead (QFN with Tab), 0.50 mm pitch; square, 2 pin X 3 pin, 2.00 mm L X 2.00 mm W X 0.80 mm H body)
pins: 1 LO+, 2 LO-, 3 EN, 4 OUT+, 5 OUT-, 6 VCC, 7 GND, 8 IN-, 9 IN+, 10 LGND, 11 GND

## MAMX-011040
designator DA?
Image Reject Mixer 8 - 26 GHz; Manufacturer: MACOM; PartNumber: MAMX-011040; ComponentLink1Description: Product Page; ComponentLink1URL: https://www.macom.com/products/product-detail/MAMX-011040; ComponentLink2Description: DataSheet; ComponentLink2URL: https://cdn.macom.com/datasheets/MAMX-011040.pdf
footprint QFN25P50_400X400X120L40X30T200N (Quad Flat No-Lead (QFN with Tab), 0.50 mm pitch; square, 6 pin X 6 pin, 4.00 mm L X 4.00 mm W X 1.20 mm H body)
pins: 1 GND, 2 GND, 3 GND, 4 IF1, 5 GND, 6 IF2, 7 GND, 8 GND, 9 GND, 10 RF, 11 GND, 12 GND, 13 GND, 14 GND, 15 GND, 16 GND, 17 LO, 18 GND, 19 GND, 20 GND, 21 GND, 22 GND, 23 GND, 24 GND, 25 GND

## MCA-50MH+
designator DA?
High IP3 Frequency Mixer wide band Level 13 (LO Power+13 dBm) 1000 to 5000 MHz; Manufacturer: Mini-Circuits; PartNumber: MCA-50MH+; ComponentLink1Description: Product Page; ComponentLink1URL: https://www.minicircuits.com/WebStore/dashboard.html?model=MCA-50MH%2B; ComponentLink2Description: DataSheet; ComponentLink2URL: https://www.minicircuits.com/WebStore/dashboardPdf?model=MCA-50MH%2B
footprint DZ883 (Mini-Circuits case DZ883)
pins: 1 GND, 2 GND, 3 IF, 4 GND, 5 RF, 6 GND, 7 GND, 8 GND, 9 GND, 10 LO

## MLD-0416SM
designator DA?
Frequency Doubler 2.0-8.0 GHz; Manufacturer: Marki; PartNumber: MLD-0416SM; ComponentLink1Description: Product Page; ComponentLink1URL: https://www.markimicrowave.com/multipliers/mld-0416sm.aspx; ComponentLink2Description: DataSheet; ComponentLink2URL: https://www.markimicrowave.com/Assets/datasheets/MLD-0416SM.pdf
footprint MLD-0416SM (Marki SMT (0.152” x 0.090” x 0.045”))
pins: 1 F, 2 2F, 3 GND

## MT3D-0113LSM
designator DA?
GaAs MMIC T3 Mixer with Differential IF; Manufacturer: Marki; PartNumber: MT3D-0113LSM; ComponentLink1Description: Product Page; ComponentLink1URL: https://www.markimicrowave.com/mixers/mt3d-0113lsm.aspx; ComponentLink2Description: DataSheet; ComponentLink2URL: https://www.markimicrowave.com/Assets/DataSheets/MT3D-0113LSM.pdf?v=111422
footprint QFN50P390X390X90_HS-25N (QFN, 24-Leads, Body 3.90x3.90mm, Pitch 0.50mm, Thermal Pad 2.50x2.50mm, IPC Medium Density)
pins: 1 GND, 2 GND, 3 GND, 4 LO(A)/RF(B), 5 GND, 6 GND, 7 GND, 8 IF P1, 9 IF P2, 10 IF N1, 11 IF N2, 12 GND, 13 GND, 14 GND, 15 RF(A)/LO(B), 16 GND, 17 GND, 18 GND, 19 GND, 20 GND, 21 GND, 22 GND, 23 GND, 24 GND, 25 GND

## RFMD2081
designator DA?
45MHz TO 2700MHz IQ MODULATOR WITH SYNTHESIZER/VCO; Manufacturer: Qorvo; PartNumber: RFMD2081; ComponentLink1Description: Product Page; ComponentLink1URL: https://www.qorvo.com/products/p/RFMD2081; ComponentLink2Description: DataSheet; ComponentLink2URL: https://www.qorvo.com/products/d/da000929
footprint QFN50P500X500X95_HS-33N (QFN, 32-Leads, Body 5.00x5.00mm, Pitch 0.50mm, Thermal Pad 3.70x3.70mm, IPC Medium Density)
pins: 1 ENBL/GPO5, 2 EXT_LO, 3 EXT_LO_DEC, 4 REXT, 5 ANA_VDD1, 6 LFILT1, 7 LFILT2, 8 LFILT3, 9 MODE/GPO6, 10 REF_IN, 11 NC, 12 TM, 13 RF_OUT_N, 14 RF_OUT_P, 15 GPO1/ADD1, 16 GPO2/ADD2, 17 DIG_VDD, 18 MOD_Q_N, 19 MOD_Q_P, 20 NC, 21 NC, 22 MOD_I_N, 23 MOD_I_P, 24 ANA_VDD2, 25 GPO3, 26 GPO4/LD/DO, 27 NC, 28 NC, 29 RESETX, 30 ENX, 31 SCLK, 32 SDATA, 33 GND

## SIM-U742MH+
designator DA?
Up Converter Level 13  (LO Power +13 dBm)   0.1 to 7400 MHz; Manufacturer: Mini-Circuits; PartNumber: SIM-U742MH+; ComponentLink1Description: Product Page; ComponentLink1URL: https://www.minicircuits.com/WebStore/dashboard.html?model=SIM-U742MH%2B; ComponentLink2Description: DataSheet; ComponentLink2URL: https://www.minicircuits.com/WebStore/dashboardPdf?model=SIM-U742MH%2B
footprint HV1195 (Mini-Circuits CASE HV1195)
pins: 1 GND, 2 IF (IN), 3 GND, 4 RF (OUT), 5 GND, 6 GND, 7 GND, 8 LO

## TGA4030-SM
designator DA?
17 – 37 GHz MPA/Multiplier; Manufacturer: Qorvo; PartNumber: TGA4030-SM; ComponentLink1Description: Product Page; ComponentLink1URL: https://www.qorvo.com/products/p/TGA4030-SM; ComponentLink2Description: DataSheet; ComponentLink2URL: https://www.qorvo.com/products/d/da004461
footprint QFN17P50_300X300X115L40X25T170N (Quad Flat No-Lead (QFN with Tab), 0.50 mm pitch; square, 4 pin X 4 pin, 3.00 mm L X 3.00 mm W X 1.15 mm H body)
pins: 1 GND, 2 GND, 3 RFIN, 4 GND, 5 Vg1, 6 NC, 7 Vg, 8 NC, 9 GND, 10 RFOUT, 11 GND, 12 GND, 13 NC, 14 Vd, 15 NC, 16 Vd1, 17 GND

## TGC2510-SM
designator DA?
Ku-Band Upconverter; Manufacturer: Qorvo; PartNumber: TGC2510-SM; ComponentLink1Description: Product Page; ComponentLink1URL: https://www.qorvo.com/products/p/TGC2510-SM; ComponentLink2Description: DataSheet; ComponentLink2URL: https://www.qorvo.com/products/d/da004760
footprint TGC2510-SM
pins: 1 GND, 2 RFOUT, 3 NC, 4 VCTRL, 5 VREF, 6 VGRF, 7 GND, 8 GND, 9 GND, 10 IF1, 11 NC, 12 IF2, 13 GND, 14 GND, 15 GND, 16 GND, 17 LOIN, 18 NC, 19 NC, 20 NC, 21 GND, 22 GND, 23 VGLO, 24 VDLO, 25 VGX, 26 GND, 27 VDRF, 28 GND, 29 GND

## TGC2610-SM
designator DA?
10 GHz – 15.4 GHz Downconverter; Manufacturer: Qorvo; PartNumber: TGC2610-SM; ComponentLink1Description: Product Page; ComponentLink1URL: https://www.qorvo.com/products/p/TGC2610-SM; ComponentLink2Description: DataSheet; ComponentLink2URL: https://www.qorvo.com/products/d/da004765
footprint TGC2610-SM
pins: 1 GND, 2 GND, 3 RFIN, 4 GND, 5 VGX, 6 GND, 7 GND, 8 GND, 9 LOIN, 10 NC, 11 NC, 12 GND, 13 VDLO, 14 GND, 15 GND, 16 GND, 17 IFOUT_LSB, 18 GND, 19 IFOUT_USB, 20 GND, 21 GND, 22 GND, 23 GND, 24 VDLNA, 25 GND, 26 GND, 27 GND, 28 GND, 29 GND

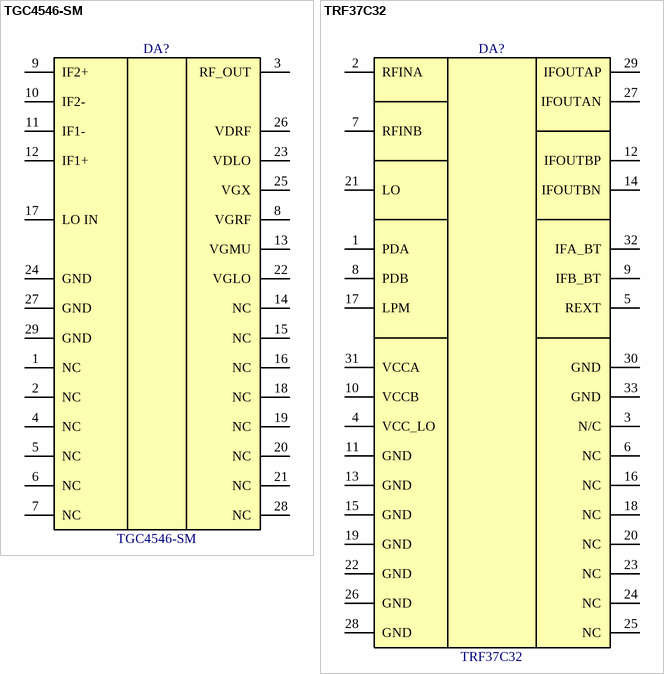
[diagram p26: symbols TGC4546-SM to TRF37C32]

## TGC4546-SM
designator DA?
36 – 45 GHz Upconverter with Quadrupler; Manufacturer: Qorvo; PartNumber: TGC4546-SM; ComponentLink1Description: Product Page; ComponentLink1URL: https://www.qorvo.com/products/p/TGC4546-SM; ComponentLink2Description: DataSheet; ComponentLink2URL: https://www.qorvo.com/products/d/da004794
footprint TGC4546-SM (TriQuint TGC4546-SM)
pins: 1 NC, 2 NC, 3 RF_OUT, 4 NC, 5 NC, 6 NC, 7 NC, 8 VGRF, 9 IF2+, 10 IF2-, 11 IF1-, 12 IF1+, 13 VGMU, 14 NC, 15 NC, 16 NC, 17 LO IN, 18 NC, 19 NC, 20 NC, 21 NC, 22 VGLO, 23 VDLO, 24 GND, 25 VGX, 26 VDRF, 27 GND, 28 NC, 29 GND

## TRF37C32
designator DA?
1700M-3800MHz Dual Down Converter Mixer with Integrated IF Amp; Manufacturer: Texas Instruments; PartNumber: TRF37C32; ComponentLink1Description: Product Page; ComponentLink1URL: https://www.ti.com/product/TRF37C32; ComponentLink2Description: DataSheet; ComponentLink2URL: https://www.ti.com/lit/gpn/trf37c32
footprint QFN50P500X500X80_HS-33N (QFN, 32-Leads, Body 5.00x5.00mm, Pitch 0.50mm, Thermal Pad 3.65x3.65mm, IPC Medium Density)
pins: 1 PDA, 2 RFINA, 3 N/C, 4 VCC_LO, 5 REXT, 6 NC, 7 RFINB, 8 PDB, 9 IFB_BT, 10 VCCB, 11 GND, 12 IFOUTBP, 13 GND, 14 IFOUTBN, 15 GND, 16 NC, 17 LPM, 18 NC, 19 GND, 20 NC, 21 LO, 22 GND, 23 NC, 24 NC, 25 NC, 26 GND, 27 IFOUTAN, 28 GND, 29 IFOUTAP, 30 GND, 31 VCCA, 32 IFA_BT, 33 GND


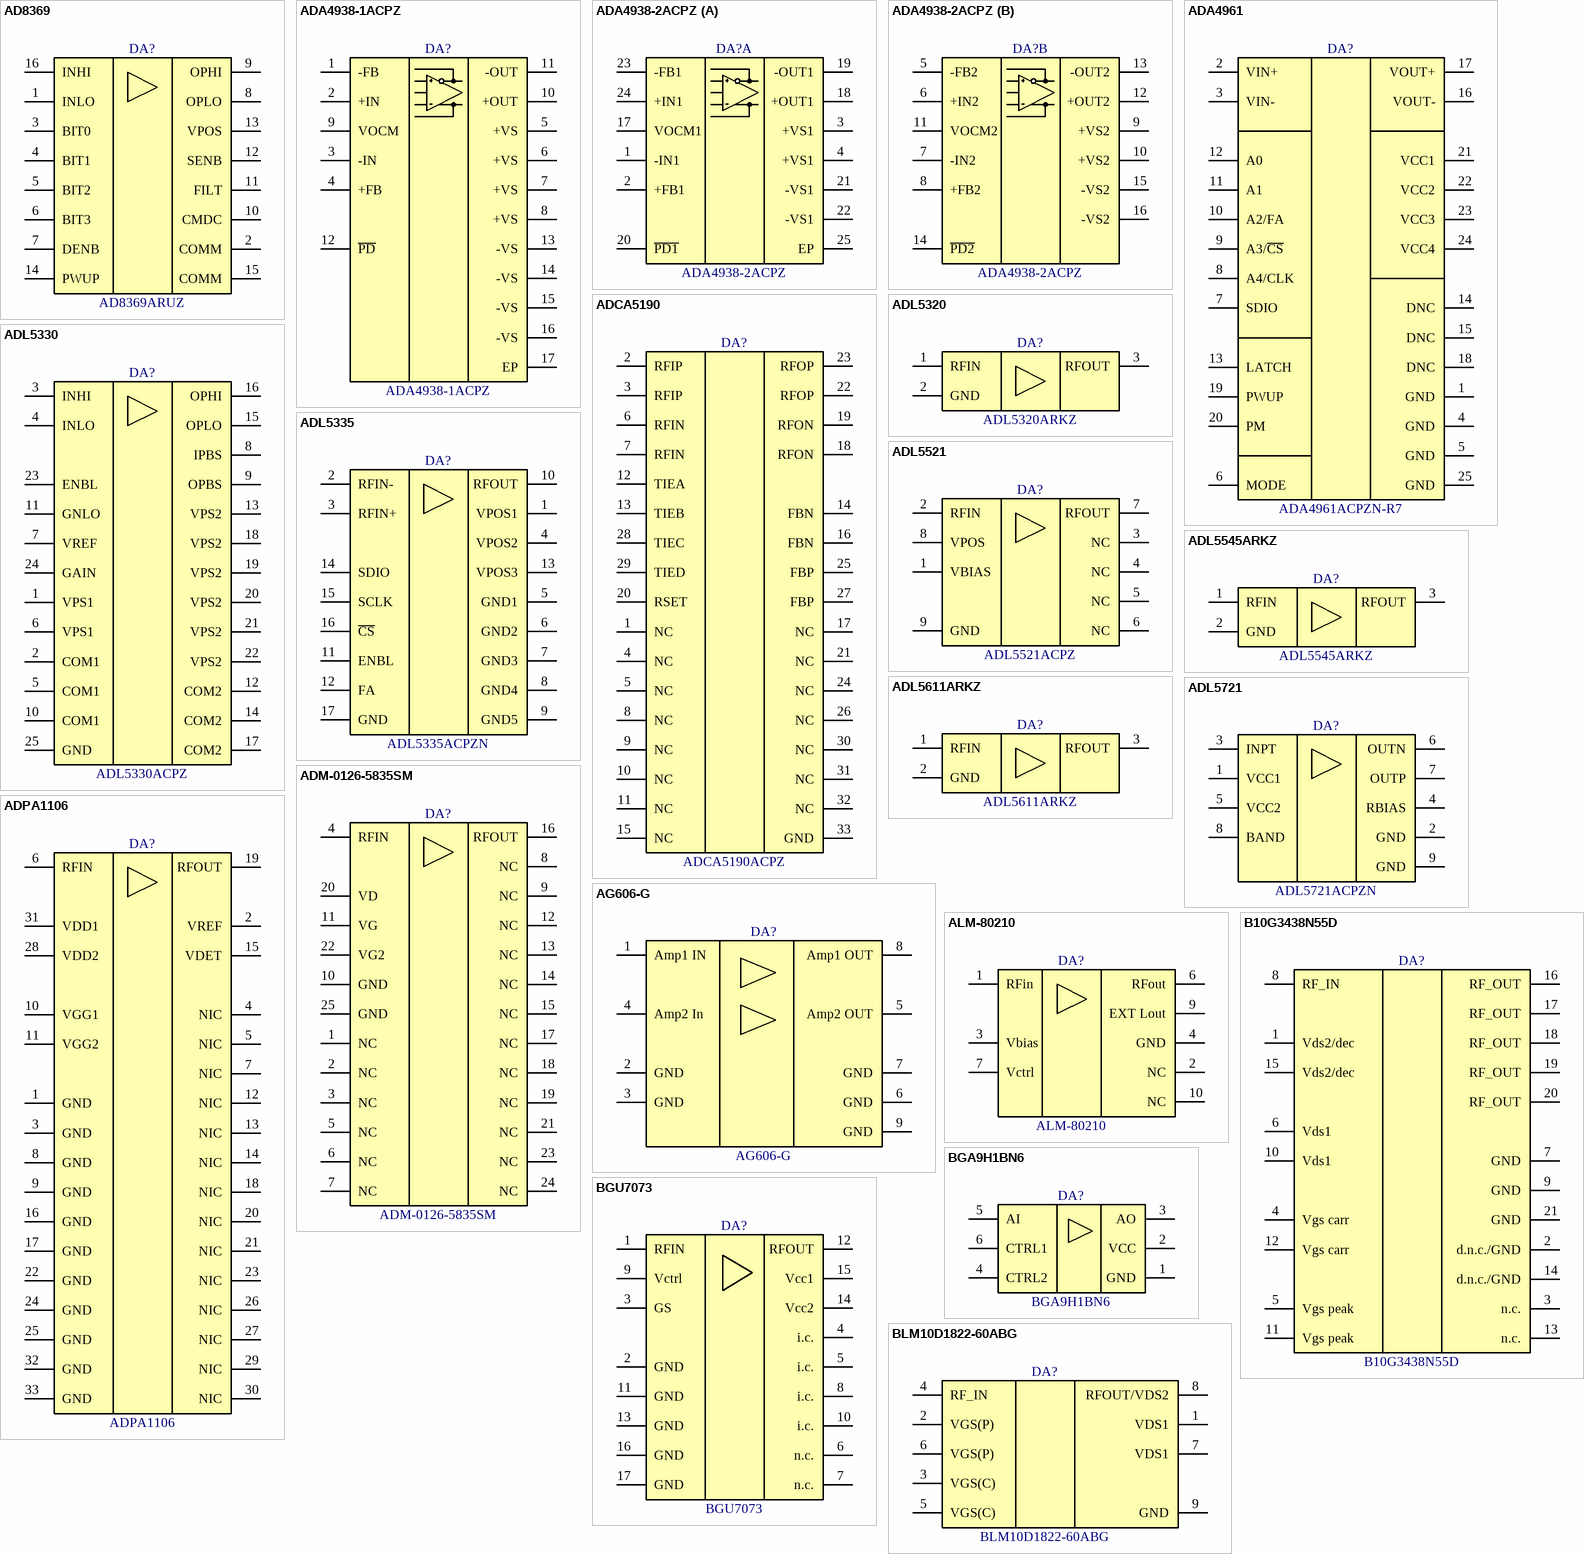
[diagram p27: symbols AD8369 to BLM10D1822-60ABG]

## AD8369
designator DA?, comment AD8369ARUZ
45 dB Digitally Controlled VGA LF to 600 MHz; Manufacturer: Analog Devices; PartNumber: AD8369ARUZ; ComponentLink1Description: Product Page; ComponentLink1URL: https://www.analog.com/en/products/ad8369.html; ComponentLink2Description: DataSheet; ComponentLink2URL: https://www.analog.com/media/en/technical-documentation/data-sheets/AD8369.pdf
footprint SOP16P65_500X640X120L60X24N (Small Outline Pkg (SOP), 0.65 mm pitch; 16 pin, 5.00 mm L X 4.40 mm W X 1.20 mm H body)
pins: 1 INLO, 2 COMM, 3 BIT0, 4 BIT1, 5 BIT2, 6 BIT3, 7 DENB, 8 OPLO, 9 OPHI, 10 CMDC, 11 FILT, 12 SENB, 13 VPOS, 14 PWUP, 15 COMM, 16 INHI

## ADA4938-1ACPZ
designator DA?
Ultralow Distortion Differential ADC Driver, 1 Channel; Manufacturer: Analog Devices; PartNumber: ADA4938-1ACPZ; ComponentLink1Description: Product Page; ComponentLink1URL: https://www.analog.com/en/products/ada4938-1.html; ComponentLink2Description: DataSheet; ComponentLink2URL: https://www.analog.com/media/en/technical-documentation/data-sheets/ADA4938-1_4938-2.pdf
footprint QFN17P50_300X300X80L40X25T145N (Quad Flat No-Lead (QFN with Tab), 0.50 mm pitch; square, 4 pin X 4 pin, 3.00 mm L X 3.00 mm W X 0.80 mm H body)
pins: 1 -FB, 2 +IN, 3 -IN, 4 +FB, 5 +VS, 6 +VS, 7 +VS, 8 +VS, 9 VOCM, 10 +OUT, 11 -OUT, 12 ~{PD}, 13 -VS, 14 -VS, 15 -VS, 16 -VS, 17 EP

## ADA4938-2ACPZ
designator DA?
Ultralow Distortion Differential ADC Driver, 2 Channel; Manufacturer: Analog Devices; PartNumber: ADA4938-2ACPZ; ComponentLink1Description: Product Page; ComponentLink1URL: https://www.analog.com/en/products/ada4938-2.html; ComponentLink2Description: DataSheet; ComponentLink2URL: https://www.analog.com/media/en/technical-documentation/data-sheets/ADA4938-1_4938-2.pdf
footprint QFN25P50_400X400X80L40X25T210N (Quad Flat No-Lead (QFN with Tab), 0.50 mm pitch; square, 6 pin X 6 pin, 4.00 mm L X 4.00 mm W X 0.80 mm H body)
part A pins: 1 -IN1, 2 +FB1, 3 +VS1, 4 +VS1, 17 VOCM1, 18 +OUT1, 19 -OUT1, 20 ~{PD1}, 21 -VS1, 22 -VS1, 23 -FB1, 24 +IN1, 25 EP
part B pins: 5 -FB2, 6 +IN2, 7 -IN2, 8 +FB2, 9 +VS2, 10 +VS2, 11 VOCM2, 12 +OUT2, 13 -OUT2, 14 ~{PD2}, 15 -VS2, 16 -VS2

## ADA4961
designator DA?, comment ADA4961ACPZN-R7
Low Distortion, 3.2 GHz, RF DGA; Manufacturer: Analog Devices; PartNumber: ADA4961ACPZN-R7; ComponentLink1Description: Product Page; ComponentLink1URL: https://www.analog.com/en/products/ada4961.html; ComponentLink2Description: DataSheet; ComponentLink2URL: https://www.analog.com/media/en/technical-documentation/data-sheets/ADA4961.pdf
footprint QFN25P50_400X400X80L40X24T255N (Quad Flat No-Lead (QFN with Tab), 0.50 mm pitch; square, 6 pin X 6 pin, 4.00 mm L X 4.00 mm W X 0.80 mm H body)
pins: 1 GND, 2 VIN+, 3 VIN-, 4 GND, 5 GND, 6 MODE, 7 SDIO, 8 A4/CLK, 9 A3/~{CS}, 10 A2/FA, 11 A1, 12 A0, 13 LATCH, 14 DNC, 15 DNC, 16 VOUT-, 17 VOUT+, 18 DNC, 19 PWUP, 20 PM, 21 VCC1, 22 VCC2, 23 VCC3, 24 VCC4, 25 GND

## ADCA5190
designator DA?, comment ADCA5190ACPZ
5 MHz to 1800 MHz Broadband CATV Amplifier; Manufacturer: Analog Devices; PartNumber: ADCA5190ACPZ; ComponentLink1Description: Product Page; ComponentLink1URL: https://www.analog.com/en/products/adca5190.html; ComponentLink2Description: DataSheet; ComponentLink2URL: https://www.analog.com/media/en/technical-documentation/data-sheets/adca5190.pdf
footprint QFN50P500X500X80_HS-33N (QFN, 32-Leads, Body 5.00x5.00mm, Pitch 0.50mm, Thermal Pad 3.65x3.65mm, IPC Medium Density)
pins: 1 NC, 2 RFIP, 3 RFIP, 4 NC, 5 NC, 6 RFIN, 7 RFIN, 8 NC, 9 NC, 10 NC, 11 NC, 12 TIEA, 13 TIEB, 14 FBN, 15 NC, 16 FBN, 17 NC, 18 RFON, 19 RFON, 20 RSET, 21 NC, 22 RFOP, 23 RFOP, 24 NC, 25 FBP, 26 NC, 27 FBP, 28 TIEC, 29 TIED, 30 NC, 31 NC, 32 NC, 33 GND

## ADL5320
designator DA?, comment ADL5320ARKZ
400 MHz to 2700 MHz ¼ Watt RF Driver Amplifier; Manufacturer: Analog Devices; PartNumber: ADL5320ARKZ; ComponentLink1Description: Product Page; ComponentLink1URL: https://www.analog.com/en/products/adl5320.html; ComponentLink2Description: DataSheet; ComponentLink2URL: https://www.analog.com/media/en/technical-documentation/data-sheets/ADL5320.pdf
footprint SOT89-150P340X160-3N (SOT89, 3-Leads, Body 4.50x2.45mm, Pitch 1.50mm, Lead Span 3.4mm, IPC Medium Density)
pins: 1 RFIN, 2 GND, 3 RFOUT

## ADL5330
designator DA?, comment ADL5330ACPZ
10 MHz to 3 GHz VGA with 60 dB Gain Control Range; Manufacturer: Analog Devices; PartNumber: ADL5330ACPZ; ComponentLink1Description: Product Page; ComponentLink1URL: https://www.analog.com/en/products/adl5330.html; ComponentLink2Description: DataSheet; ComponentLink2URL: https://www.analog.com/media/en/technical-documentation/data-sheets/ADL5330.pdf
footprint ADL5330 (AD 24-Lead Lead Frame Chip Scale Package  [LFCSP_VQ] 4 mm ? 4 mm Body, Very Thin Quad  (CP-24-2))
pins: 1 VPS1, 2 COM1, 3 INHI, 4 INLO, 5 COM1, 6 VPS1, 7 VREF, 8 IPBS, 9 OPBS, 10 COM1, 11 GNLO, 12 COM2, 13 VPS2, 14 COM2, 15 OPLO, 16 OPHI, 17 COM2, 18 VPS2, 19 VPS2, 20 VPS2, 21 VPS2, 22 VPS2, 23 ENBL, 24 GAIN, 25 GND

## ADL5335
designator DA?, comment ADL5335ACPZN
700 MHz to 4200 MHz, Tx DGA; Manufacturer: Analog Devices; PartNumber: ADL5335ACPZN; ComponentLink1Description: Product Page; ComponentLink1URL: https://www.analog.com/en/products/adl5335.html; ComponentLink2Description: DataSheet; ComponentLink2URL: https://www.analog.com/media/en/technical-documentation/data-sheets/adl5335.pdf
footprint QFN17P65_400X400X80L40X28T234N (Quad Flat No-Lead (QFN with Tab), 0.65 mm pitch; square, 4 pin X 4 pin, 4.00 mm L X 4.00 mm W X 0.80 mm H body)
pins: 1 VPOS1, 2 RFIN-, 3 RFIN+, 4 VPOS2, 5 GND1, 6 GND2, 7 GND3, 8 GND4, 9 GND5, 10 RFOUT, 11 ENBL, 12 FA, 13 VPOS3, 14 SDIO, 15 SCLK, 16 ~{CS}, 17 GND

## ADL5521
designator DA?, comment ADL5521ACPZ
400 MHz to 4000 MHz Low Noise Amplifier; Manufacturer: Analog Devices; PartNumber: ADL5521ACPZ; ComponentLink1Description: Product Page; ComponentLink1URL: https://www.analog.com/en/products/adl5521.html; ComponentLink2Description: DataSheet; ComponentLink2URL: https://www.analog.com/media/en/technical-documentation/data-sheets/ADL5521.pdf
footprint SON9P50_300X300X90L40X24T174X145N (Small Outline No-Lead (SON with Tab), 0.50 mm pitch; 8 pin, 3.00 mm L X 3.00 mm W X 0.90 mm H body)
pins: 1 VBIAS, 2 RFIN, 3 NC, 4 NC, 5 NC, 6 NC, 7 RFOUT, 8 VPOS, 9 GND

## ADL5545ARKZ
designator DA?
30 MHz to 6 GHz RF/IF Gain Block; Manufacturer: Analog Devices; PartNumber: ADL5545ARKZ; ComponentLink1Description: Product Page; ComponentLink1URL: https://www.analog.com/en/products/adl5545.html; ComponentLink2Description: DataSheet; ComponentLink2URL: https://www.analog.com/media/en/technical-documentation/data-sheets/ADL5545.PDF
footprint SOT89-150P342X160-3N (SOT89, 3-Leads, Body 4,50x2,45mm, Pitch 1,50mm, Lead Span 3,4mm, IPC Medium Density)
pins: 1 RFIN, 2 GND, 3 RFOUT

## ADL5611ARKZ
designator DA?
30 MHz to 6 GHz RF/IF Gain Block; Manufacturer: Analog Devices; PartNumber: ADL5611ARKZ; ComponentLink1Description: Product Page; ComponentLink1URL: https://www.analog.com/en/products/adl5611.html; ComponentLink2Description: DataSheet; ComponentLink2URL: https://www.analog.com/media/en/technical-documentation/data-sheets/ADL5611.pdf
footprint SOT89-150P342X160-3N (SOT89, 3-Leads, Body 4,50x2,45mm, Pitch 1,50mm, Lead Span 3,4mm, IPC Medium Density)
pins: 1 RFIN, 2 GND, 3 RFOUT

## ADL5721
designator DA?, comment ADL5721ACPZN
5.9 GHz to 8.5 GHz, Low Noise Amplifier; Manufacturer: Analog Devices; PartNumber: ADL5721ACPZN; ComponentLink1Description: Product Page; ComponentLink1URL: https://www.analog.com/en/products/adl5721.html; ComponentLink2Description: DataSheet; ComponentLink2URL: https://www.analog.com/media/en/technical-documentation/data-sheets/ADL5721.pdf
footprint SON9P50_200X200X60L35X25T160X100N (Small Outline No-Lead (SON with Tab), 0.50 mm pitch; 8 pin, 2.00 mm L X 2.00 mm W X 0.60 mm H body)
pins: 1 VCC1, 2 GND, 3 INPT, 4 RBIAS, 5 VCC2, 6 OUTN, 7 OUTP, 8 BAND, 9 GND

## ADM-0126-5835SM
designator DA?
Broadband distributed amplifier 0.7 to 26.5 GHz; Manufacturer: Broadcom; PartNumber: ADM-0126-5835SM
footprint PQFN25P50_390X390X90L32X30T250N (Pullback Quad Flat No-Lead (PQFN with Tab), 0.50 mm pitch; square, 6 pin X 6 pin, 3.90 mm L X 3.90 mm W X 0.90 mm H body)
pins: 1 NC, 2 NC, 3 NC, 4 RFIN, 5 NC, 6 NC, 7 NC, 8 NC, 9 NC, 10 GND, 11 VG, 12 NC, 13 NC, 14 NC, 15 NC, 16 RFOUT, 17 NC, 18 NC, 19 NC, 20 VD, 21 NC, 22 VG2, 23 NC, 24 NC, 25 GND

## ADPA1106
designator DA?
46 dBm (40 W), 2.7 GHz to 3.5 GHz, GaN Power Amplifier; Manufacturer: Analog Devices; PartNumber: ADPA1106; ComponentLink1Description: Product Page; ComponentLink1URL: https://www.analog.com/en/products/adpa1106.html; ComponentLink2Description: DataSheet; ComponentLink2URL: https://www.analog.com/media/en/technical-documentation/data-sheets/adpa1106.pdf
footprint QFN50P500X500X135_HS-33N (QFN, 32-Leads, Body 5.00x5.00mm, Pitch 0.50mm, Thermal Pad 3.10x3.10mm, IPC Medium Density)
pins: 1 GND, 2 VREF, 3 GND, 4 NIC, 5 NIC, 6 RFIN, 7 NIC, 8 GND, 9 GND, 10 VGG1, 11 VGG2, 12 NIC, 13 NIC, 14 NIC, 15 VDET, 16 GND, 17 GND, 18 NIC, 19 RFOUT, 20 NIC, 21 NIC, 22 GND, 23 NIC, 24 GND, 25 GND, 26 NIC, 27 NIC, 28 VDD2, 29 NIC, 30 NIC, 31 VDD1, 32 GND, 33 GND

## AG606-G
designator DA?
50 - 1000 MHz Dual HBT Push-Pull CATV Amplifier; Manufacturer: Qorvo; PartNumber: AG606-G; ComponentLink1Description: Product Page; ComponentLink1URL: https://www.qorvo.com/products/p/AG606-G; ComponentLink2Description: DataSheet; ComponentLink2URL: https://www.qorvo.com/products/d/da003341
footprint AG606-G (SOP, 8-Leads, Body 4.90x3.90mm, Pitch 1.27mm, Thermal Pad 3.30x2.67mm, Modified AG606-G)
pins: 1 Amp1 IN, 2 GND, 3 GND, 4 Amp2 In, 5 Amp2 OUT, 6 GND, 7 GND, 8 Amp1 OUT, 9 GND

## ALM-80210
designator DA?
0.25W Analog Variable Gain Amplifier; Manufacturer: Broadcom; PartNumber: ALM-80210
footprint ALM-80210 (AVAGO ALM-80210)
pins: 1 RFin, 2 NC, 3 Vbias, 4 GND, 6 RFout, 7 Vctrl, 9 EXT Lout, 10 NC

## B10G3438N55D
designator DA?
LDMOS 3-stage integrated Doherty MMIC; Manufacturer: Ampleon; PartNumber: B10G3438N55D; ComponentLink1Description: Product Page; ComponentLink1URL: https://www.ampleon.com/products/mobile-broadband/3.3-4.2-ghz-transistors/B10G3438N55D.html; ComponentLink2Description: DataSheet; ComponentLink2URL: https://www.ampleon.com/documents/data-sheet/B10G3438N55D.pdf
footprint QFN115P800X800X220_HS-21N (QFN, 20-Leads, Body 8.00x8.00mm, Pitch 1.15mm, Thermal Pad 4.62x4.62mm, IPC Medium Density)
pins: 1 Vds2/dec, 2 d.n.c./GND, 3 n.c., 4 Vgs carr, 5 Vgs peak, 6 Vds1, 7 GND, 8 RF_IN, 9 GND, 10 Vds1, 11 Vgs peak, 12 Vgs carr, 13 n.c., 14 d.n.c./GND, 15 Vds2/dec, 16 RF_OUT, 17 RF_OUT, 18 RF_OUT, 19 RF_OUT, 20 RF_OUT, 21 GND

## BGA9H1BN6
designator DA?
Highband High Perfomance LNA with Power-Save-Mode; Manufacturer: Infineon; PartNumber: BGA9H1BN6; ComponentLink1Description: Product Page; ComponentLink1URL: https://www.infineon.com/cms/en/product/rf/low-noise-amplifier-lna-ics/lte-3g-lnas/bga9h1bn6/; ComponentLink2Description: DataSheet; ComponentLink2URL: https://www.infineon.com/dgdl/Infineon-BGA9H1BN6-DataSheet-v02_00-EN.pdf?fileId=8ac78c8c7cdc391c017ceabfc63e0e28
footprint PG-TSNP-6-10 (Infineon PG-TSNP-6-10 Package Outline (0.7mm x 1.1mm x 0.37mm))
pins: 1 GND, 2 VCC, 3 AO, 4 CTRL2, 5 AI, 6 CTRL1

## BGU7073
designator DA?
Analog controlled high linearity low noise variable gain / amplifier; Manufacturer: NXP; PartNumber: BGU7073; ComponentLink1Description: Product Page; ComponentLink1URL: https://www.nxp.com/part/BGU7073#/; ComponentLink2Description: DataSheet; ComponentLink2URL: https://www.nxp.com/docs/en/data-sheet/BGU7073.pdf
footprint QFN142P800X800X140_HS-17N (QFN, 16-Leads, Body 8.00x8.00mm, Pitch 1.42mm, Thermal Pad 5.80x5.80mm, IPC Medium Density)
pins: 1 RFIN, 2 GND, 3 GS, 4 i.c., 5 i.c., 6 n.c., 7 n.c., 8 i.c., 9 Vctrl, 10 i.c., 11 GND, 12 RFOUT, 13 GND, 14 Vcc2, 15 Vcc1, 16 GND, 17 GND

## BLM10D1822-60ABG
designator DA?
LDMOS 2-stage integrated Doherty MMIC 1800 MHz to 2200 MHz; Manufacturer: Ampleon; PartNumber: BLM10D1822-60ABG; ComponentLink1Description: Product Page; ComponentLink1URL: https://www.ampleon.com/products/mobile-broadband/1.4-2.2-ghz-transistors/BLM10D1822-60ABG.html; ComponentLink2Description: DataSheet; ComponentLink2URL: https://www.ampleon.com/documents/data-sheet/BLM10D1822-60ABG.pdf
footprint OMP-400-8G-1 (AMPLEON OMP-400-8G-1 Gull Wing 10.3X10.3X4.0mm)
pins: 1 VDS1, 2 VGS(P), 3 VGS(C), 4 RF_IN, 5 VGS(C), 6 VGS(P), 7 VDS1, 8 RFOUT/VDS2, 9 GND

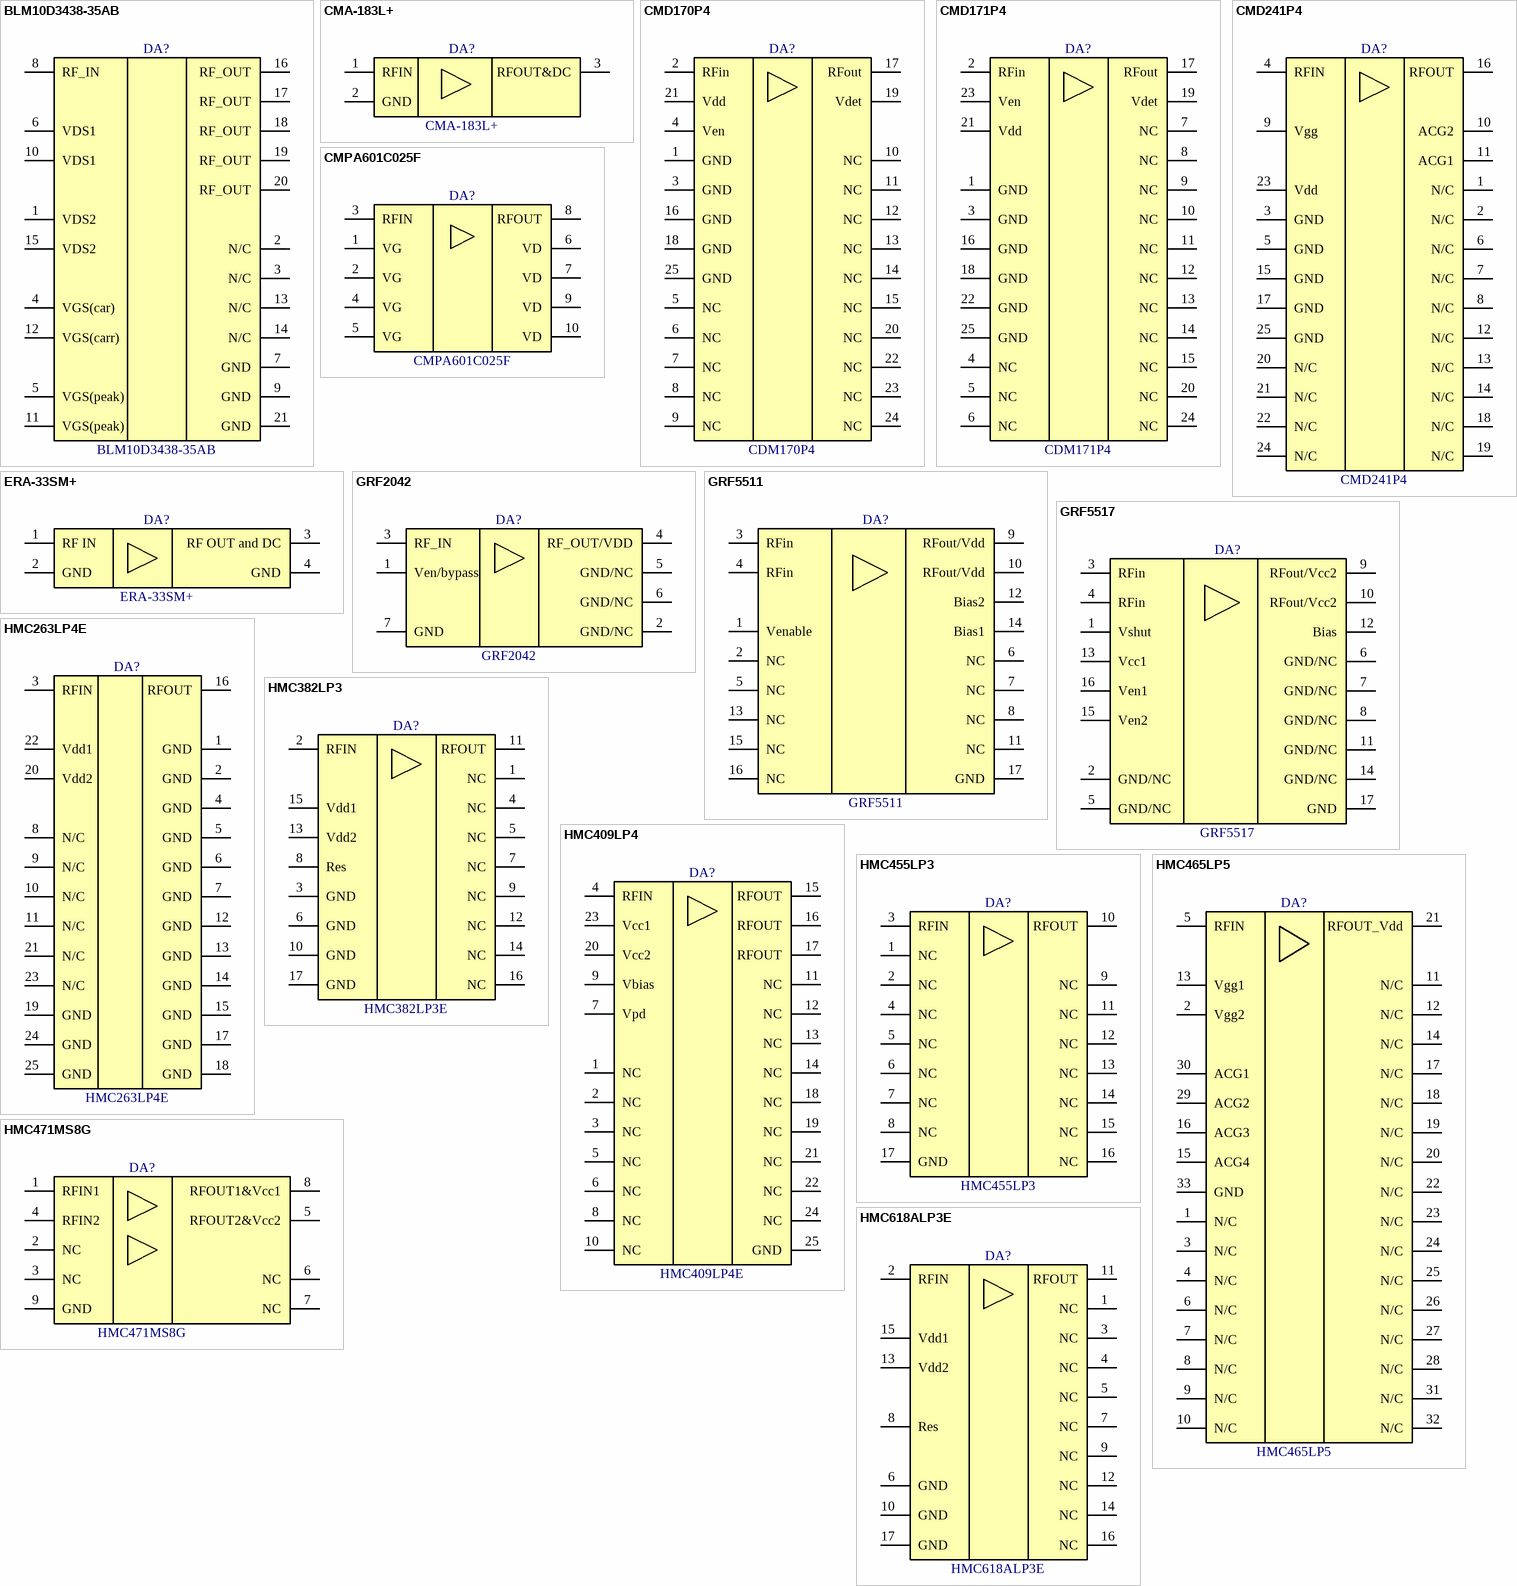
[diagram p28: symbols BLM10D3438-35AB to HMC618ALP3E]

## BLM10D3438-35AB
designator DA?
LDMOS 3-stage integrated Doherty MMIC; Manufacturer: Ampleon; PartNumber: BLM10D3438-35AB; ComponentLink1Description: Product Page; ComponentLink1URL: https://www.ampleon.com/products/mobile-broadband/3.3-4.2-ghz-transistors/BLM10D3438-35AB.html; ComponentLink2Description: DataSheet; ComponentLink2URL: https://www.ampleon.com/documents/data-sheet/BLM10D3438-35AB.pdf
footprint QFN115P800X800X220_HS-21N (QFN, 20-Leads, Body 8.00x8.00mm, Pitch 1.15mm, Thermal Pad 4.62x4.62mm, IPC Medium Density)
pins: 1 VDS2, 2 N/C, 3 N/C, 4 VGS(car), 5 VGS(peak), 6 VDS1, 7 GND, 8 RF_IN, 9 GND, 10 VDS1, 11 VGS(peak), 12 VGS(carr), 13 N/C, 14 N/C, 15 VDS2, 16 RF_OUT, 17 RF_OUT, 18 RF_OUT, 19 RF_OUT, 20 RF_OUT, 21 GND

## CMA-183L+
designator DA?
Low Current, Wideband, Ceramic Monolithic Amplifier 50Ω DC to 18 GHz; Manufacturer: Mini-Circuits; PartNumber: CMA-183L+; ComponentLink1Description: Product Page; ComponentLink1URL: https://www.minicircuits.com/WebStore/dashboard.html?model=CMA-183L%2B; ComponentLink2Description: DataSheet; ComponentLink2URL: https://www.minicircuits.com/WebStore/dashboardPdf?model=CMA-183L%2B
footprint LZ1737 (Mini-Circuits case LZ1737)
pins: 1 RFIN, 2 GND, 3 RFOUT&DC

## CMD170P4
designator DA?, comment CDM170P4
7.5-9 GHz Driver Amplifier; Manufacturer: Qorvo; PartNumber: CDM170P4; ComponentLink1Description: Product Page; ComponentLink1URL: https://www.qorvo.com/products/p/CMD170P4; ComponentLink2Description: DataSheet; ComponentLink2URL: https://www.qorvo.com/products/d/da007380
footprint QFN25P50_400X400X100L40X24T245N (Quad Flat No-Lead (QFN with Tab), 0.50 mm pitch; square, 6 pin X 6 pin, 4.00 mm L X 4.00 mm W X 1.00 mm H body)
pins: 1 GND, 2 RFin, 3 GND, 4 Ven, 5 NC, 6 NC, 7 NC, 8 NC, 9 NC, 10 NC, 11 NC, 12 NC, 13 NC, 14 NC, 15 NC, 16 GND, 17 RFout, 18 GND, 19 Vdet, 20 NC, 21 Vdd, 22 NC, 23 NC, 24 NC, 25 GND

## CMD171P4
designator DA?, comment CDM171P4
9.5-11 GHz Driver Amplifier; Manufacturer: Qorvo; PartNumber: CDM171P4
footprint QFN25P50_400X400X100L40X24T245N (Quad Flat No-Lead (QFN with Tab), 0.50 mm pitch; square, 6 pin X 6 pin, 4.00 mm L X 4.00 mm W X 1.00 mm H body)
pins: 1 GND, 2 RFin, 3 GND, 4 NC, 5 NC, 6 NC, 7 NC, 8 NC, 9 NC, 10 NC, 11 NC, 12 NC, 13 NC, 14 NC, 15 NC, 16 GND, 17 RFout, 18 GND, 19 Vdet, 20 NC, 21 Vdd, 22 GND, 23 Ven, 24 NC, 25 GND